# Altium schematic symbol library Integrated Circuits.SchLib: 166 symbols (part 1 of 2)
Pins are listed as number, name and electrical type; pins without a type are passive.

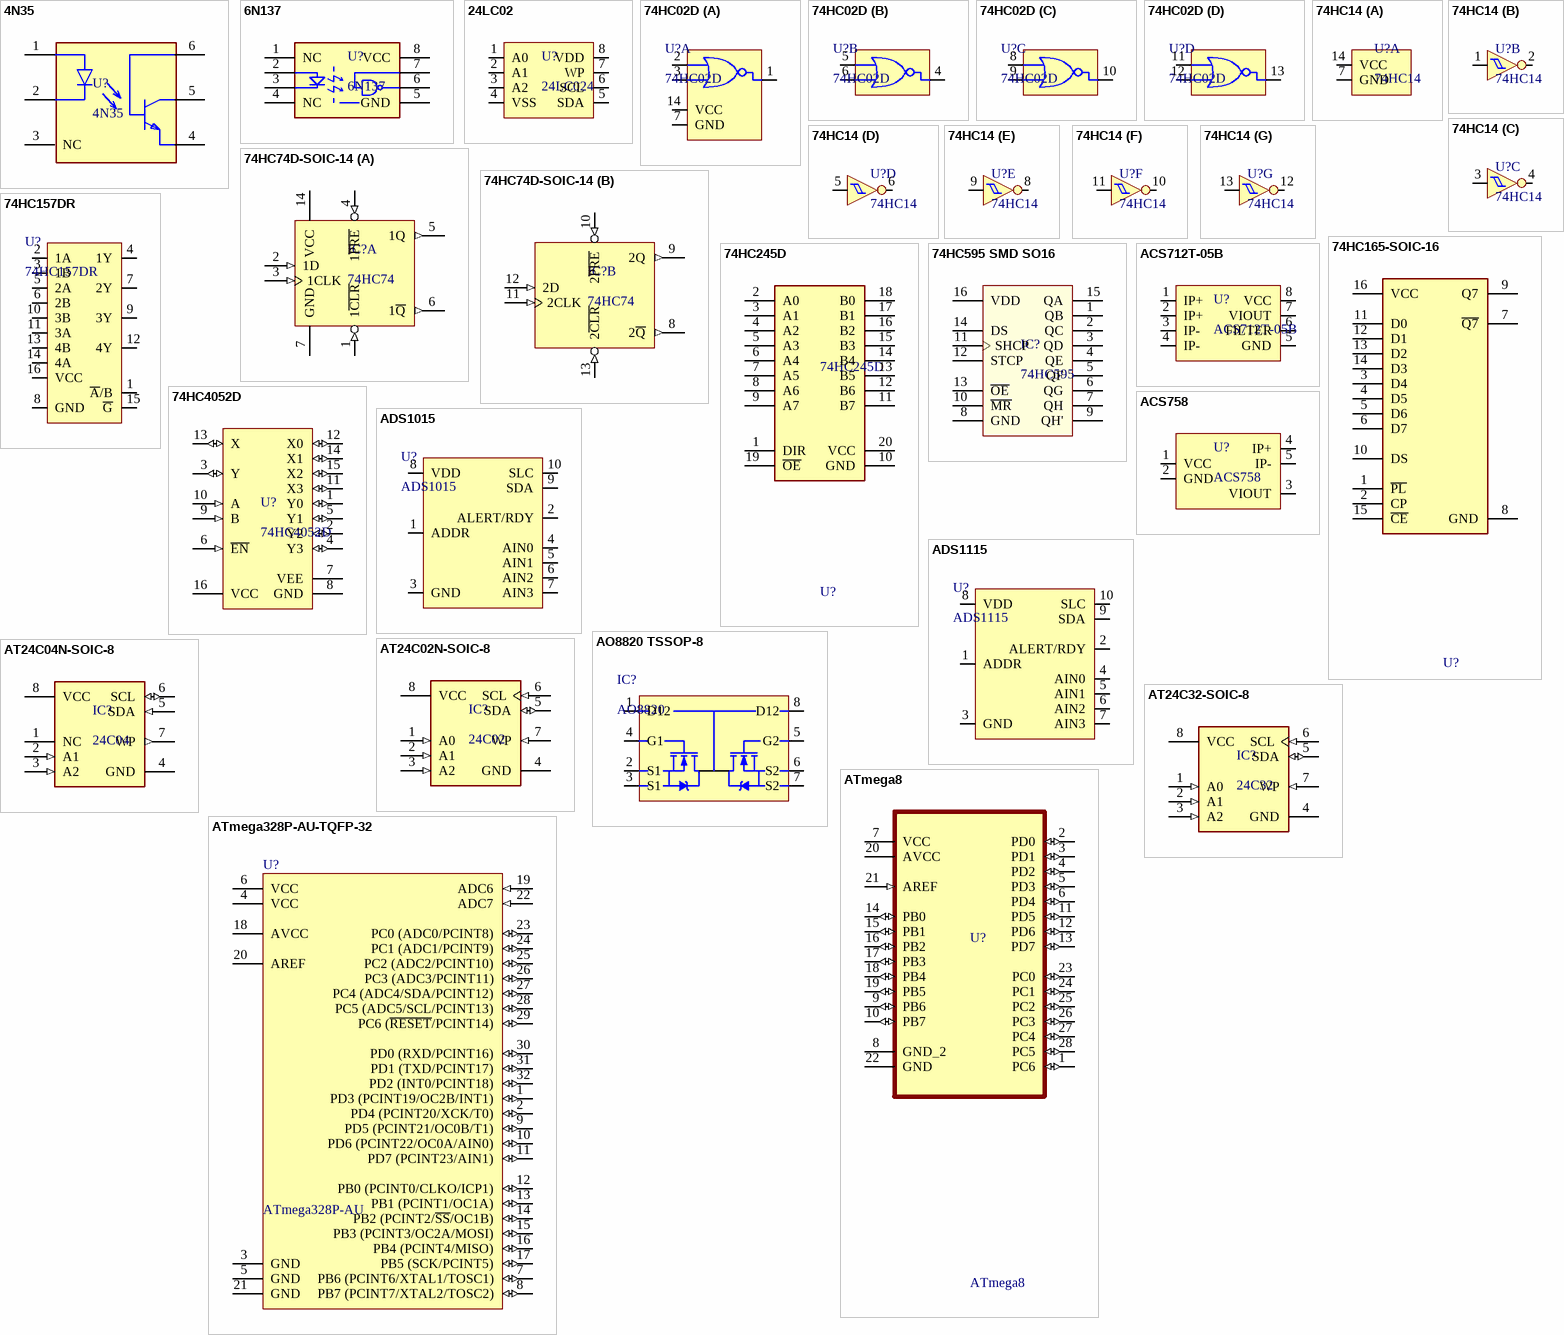
[diagram p0: symbols 4N35 to ATmega328P-AU-TQFP-32]

## 4N35
designator U?
Optocoupler DC-IN 1-CH Transistor With Base DC-OUT 6-Pin PDIP SMD White T/R; Code: 2302-016; Designed by: nhox; Value: 4N35
footprint SOP-6 7.12x6.5 2.54P (PDIP6 8.51x6.35, 2.54P)
pins: 1 A, 2 C, 3 NC, 4 E, 5 C, 6 B

## 6N137
designator U?
High Speed Optocoupler, Single; Designed by: nhox; Code: N/A; Value: 6N137
footprint SMD-8
pins: 1 NC, 2 A, 3 C, 4 NC, 5 GND (power), 6 VO (oc), 7 VE, 8 VCC (power)

## 24LC02
designator U?, comment 24LC024
Low-power CMOS technology, 256 bytes (256 x 8); Code: 5205-002; Designed by: nhox
footprint SO_8 (SOP-8, 5x3.9mm body 1.27mm pitch, SOT96-1, M08A, S8, SOIC8, VO8, MS-012AA(JEDEC), R-8, 8S2, VOG8)
pins: 1 A0, 2 A1, 3 A2, 4 VSS, 5 SDA, 6 SCL, 7 WP, 8 VDD

## 74HC02D
designator U?
Quad 2-input NOR gate; Designed by: Nhox; Code: N/A
footprint SO_14 (SOP, SOIC, 3.9mm width, 1.27mm pitch,)
part A pins: 1 Y, 2 A, 3 B, 7 GND, 14 VCC
part B pins: 4 Y, 5 A, 6 B
part C pins: 8 A, 9 B, 10 Y
part D pins: 11 A, 12 B, 13 Y

## 74HC14
designator U?
Hex inverting Schmitt trigger; Code: 5015-019
footprint SO_14 (SOP, SOIC, 3.9mm width, 1.27mm pitch,)
part A pins: 7 GND, 14 VCC
part B pins: 1, 2
part C pins: 3, 4
part D pins: 5, 6
part E pins: 8, 9
part F pins: 10, 11
part G pins: 12, 13

## 74HC74D-SOIC-14
designator IC?, comment 74HC74
Dual D-type flip-flop with set and reset; positive edge-trigger; Designed by: TranLuyen; Code: N/A
footprint SO_14 (SOP, SOIC, 3.9mm width, 1.27mm pitch,)
part A pins: 1 1~{CLR} (in), 2 1D (in), 3 1CLK (in), 4 1~{PRE} (in), 5 1Q (out), 6 1~{Q} (out), 7 GND (power), 14 VCC (power)
part B pins: 8 2~{Q} (out), 9 2Q (out), 10 2~{PRE} (in), 11 2CLK (in), 12 2D (in), 13 2~{CLR} (in)

## 74HC157DR
designator U?
QUADRUPLE 2-LINE TO 1-LINE DATA SELECTORS/MULTIPLEXERS; Designed by: Nhox; Code: N/A
footprint SO_16 (SOP, SOIC, 3.9mm width, 1.27mm pitch,)
pins: 1 ~{A}/B, 2 1A, 3 1B, 4 1Y, 5 2A, 6 2B, 7 2Y, 8 GND, 9 3Y, 10 3B, 11 3A, 12 4Y, 13 4B, 14 4A, 15 ~{G}, 16 VCC

## 74HC165-SOIC-16
designator U?, comment 74HC165  (value not drawn)
IC Shift Register 1 Element 8 Bit, Complementary 16-SOIC; Code: 5001-007; Designed by: nhox
footprint SO_16 (SOP, SOIC, 3.9mm width, 1.27mm pitch,)
pins: 1 ~{PL}, 2 CP, 3 D4, 4 D5, 5 D6, 6 D7, 7 ~{Q7}, 8 GND (power), 9 Q7, 10 DS, 11 D0, 12 D1, 13 D2, 14 D3, 15 ~{CE}, 16 VCC (power)

## 74HC245D
designator U?
Transceiver, Non-Inverting, CMOS, Voltage - Supply: 2V ~ 6V, Input Type: CMOS, Output Type: 3-State, Current - Output High, Low: 7.8mA, 7.8mA, 20-SOIC; Code: 5001-035; Designed by: nhox
footprint SO_20_W (SOP, SOIC, 7.5mm width, 1.27mm pitch,)
pins: 1 DIR, 2 A0, 3 A1, 4 A2, 5 A3, 6 A4, 7 A5, 8 A6, 9 A7, 10 GND, 11 B7, 12 B6, 13 B5, 14 B4, 15 B3, 16 B2, 17 B1, 18 B0, 19 ~{OE}, 20 VCC

## 74HC595 SMD SO16
designator IC?, comment 74HC595
Shift Register Single 8-Bit Serial to Serial/Parallel 16-Pin SOIC T/R; Code: 5001-017; Designed by: nhox
footprint SO_16 (SOP, SOIC, 3.9mm width, 1.27mm pitch,)
pins: 1 QB, 2 QC, 3 QD, 4 QE, 5 QF, 6 QG, 7 QH, 8 GND (power), 9 QH' "OUTPUT", 10 ~{MR}, 11 SHCP, 12 STCP, 13 ~{OE}, 14 DS, 15 QA, 16 VDD (power)

## 74HC4052D
designator U?
Analog Multiplexer / Demultiplexer, High-Performance Silicon-Gate CMOS, 2 to 12 V, -55 to 125 degC, 16-Pin PDIP, Pb-Free, Tube; Code: 5001-002; ComponentLink1Description: Manufacturer URL; ComponentLink2Description: Datasheet; ComponentLink3URL: http://www.onsemi.com/pub_link/Collateral/MC14028B-D.PDF; ComponentLink3Description: Package Specification; ComponentLink1URL: http://www.onsemi.com/; ComponentLink2URL: http://www.onsemi.com/pub_link/Collateral/MC74HC4051A-D.PDF
footprint SO_16 (SOP, SOIC, 3.9mm width, 1.27mm pitch,)
pins: 1 Y0 (io), 2 Y2 (io), 3 Y (io), 4 Y3 (io), 5 Y1 (io), 6 ~{EN} (in), 7 VEE (power), 8 GND (power), 9 B (in), 10 A (in), 11 X3 (io), 12 X0 (io), 13 X (io), 14 X1 (io), 15 X2 (io), 16 VCC (power)

## ACS712T-05B
designator U?
+-5A, 185mV/A; Code: N/A
footprint SO_8 (SOP-8, 5x3.9mm body 1.27mm pitch, SOT96-1, M08A, S8, SOIC8, VO8, MS-012AA(JEDEC), R-8, 8S2, VOG8)
pins: 1 IP+, 2 IP+, 3 IP-, 4 IP-, 5 GND, 6 FILTER, 7 VIOUT, 8 VCC

## ACS758
designator U?
Current Sensor 150A 1 Channel Hall Effect, Open Loop Bidirectional / 5-CB Formed Leads, PFF; Code: N/A
footprint DIP_PFF
pins: 1 VCC, 2 GND, 3 VIOUT, 4 IP+, 5 IP-

## ADS1015
designator U?
HIGH PERFORMANCE CURRENT MODE PWM CONTROLLER; Code: N/A
footprint VSSOP-10
pins: 1 ADDR, 2 ALERT/RDY, 3 GND, 4 AIN0, 5 AIN1, 6 AIN2, 7 AIN3, 8 VDD, 9 SDA, 10 SLC

## ADS1115
designator U?
HIGH PERFORMANCE CURRENT MODE PWM CONTROLLER; Code: N/A
footprint VSSOP-10
pins: 1 ADDR, 2 ALERT/RDY, 3 GND, 4 AIN0, 5 AIN1, 6 AIN2, 7 AIN3, 8 VDD, 9 SDA, 10 SLC

## AO8820 TSSOP-8
designator IC?, comment AO8820
20V Common-Drain Dual N-Channel MOSFET; Code: N/A
footprint SOG65_8 (PW TSSOP (TI), MO-153 (JEDEC), 8Lead, pitch: 0.65mm, 3x4.4x1.2mm)
pins: 1 D12, 2 S1, 3 S1, 4 G1, 5 G2, 6 S2, 7 S2, 8 D12

## AT24C02N-SOIC-8
designator IC?, comment 24C02
EEPROM 2Kb (256 x 8); Code: 5202-025
footprint SO_8 (SOP-8, 5x3.9mm body 1.27mm pitch, SOT96-1, M08A, S8, SOIC8, VO8, MS-012AA(JEDEC), R-8, 8S2, VOG8)
pins: 1 A0 (in), 2 A1 (in), 3 A2 (in), 4 GND (power), 5 SDA (io), 6 SCL (in), 7 WP (in), 8 VCC (power)

## AT24C04N-SOIC-8
designator IC?, comment 24C04
EEPROM 4Kb (512 x 8); Code: 5202-015
footprint SO_8 (SOP-8, 5x3.9mm body 1.27mm pitch, SOT96-1, M08A, S8, SOIC8, VO8, MS-012AA(JEDEC), R-8, 8S2, VOG8)
pins: 1 NC, 2 A1 (in), 3 A2 (in), 4 GND (power), 5 SDA (in), 6 SCL (io), 7 WP (out), 8 VCC

## AT24C32-SOIC-8
designator IC?, comment 24C32
EEPROM Serial-2Wire 32K-bit 4K x 8 1.8V/2.5V/3.3V/5V Automotive 8-Pin SOIC T/; Code: 5202-026
footprint SO_8 (SOP-8, 5x3.9mm body 1.27mm pitch, SOT96-1, M08A, S8, SOIC8, VO8, MS-012AA(JEDEC), R-8, 8S2, VOG8)
pins: 1 A0 (in), 2 A1 (in), 3 A2 (in), 4 GND (power), 5 SDA (io), 6 SCL (in), 7 WP (in), 8 VCC (power)

## ATmega8
designator U?
AVR Microcontroller IC 8-Bit 16MHz 8KB FLASH, 28-DIP; Code: N/A
footprint DIP_28 (DIP, pitch 2.54mm, 300mil Width)
pins: 1 PC6 (io), 2 PD0 (io), 3 PD1 (io), 4 PD2 (io), 5 PD3 (io), 6 PD4 (io), 7 VCC (power), 8 GND_2, 9 PB6 (io), 10 PB7 (io), 11 PD5 (io), 12 PD6 (io), 13 PD7 (io), 14 PB0 (io), 15 PB1 (io), 16 PB2 (io), 17 PB3 (io), 18 PB4 (io), 19 PB5 (io), 20 AVCC (power), 21 AREF (in), 22 GND, 23 PC0 (io), 24 PC1 (io), 25 PC2 (io), 26 PC3 (io), 27 PC4 (io), 28 PC5 (io)

## ATmega328P-AU-TQFP-32
designator U?, comment ATmega328P-AU
8-bit AVR Microcontroller, 32KB Flash, 1KB EEPROM, 2KB SRAM, 32-pin TQFP, Industrial Grade (-40°C to 85°C); Code: 7202-032; ComponentLink1URL: http://www.atmel.com/; ComponentLink2Description: ATmega48A/48PA/88A/88PA/168A/168PA/328/328P Datasheet; ComponentLink1Description: Manufacturer URL; ComponentLink3Description: ATmega48A/48PA/88A/88PA/168A/168PA/328/328P Summary; ComponentLink2URL: http://www.atmel.com/dyn/resources/prod_documents/doc8271.pdf; ComponentLink3URL: http://www.atmel.com/dyn/resources/prod_documents/8271S.pdf
footprint TQFP-32A_M (Thin QFP, 32-Leads, Body 7x7mm, Pitch 0.8mm, IPC Low Density)
pins: 1 PD3 (PCINT19/OC2B/INT1) (io), 2 PD4 (PCINT20/XCK/T0) (io), 3 GND (power), 4 VCC (power), 5 GND (power), 6 VCC (power), 7 PB6 (PCINT6/XTAL1/TOSC1) (io), 8 PB7 (PCINT7/XTAL2/TOSC2) (io), 9 PD5 (PCINT21/OC0B/T1) (io), 10 PD6 (PCINT22/OC0A/AIN0) (io), 11 PD7 (PCINT23/AIN1) (io), 12 PB0 (PCINT0/CLKO/ICP1) (io), 13 PB1 (PCINT1/OC1A) (io), 14 PB2 (PCINT2/~{SS}/OC1B) (io), 15 PB3 (PCINT3/OC2A/MOSI) (io), 16 PB4 (PCINT4/MISO) (io), 17 PB5 (SCK/PCINT5) (io), 18 AVCC (power), 19 ADC6 (in), 20 AREF, 21 GND (power), 22 ADC7 (in), 23 PC0 (ADC0/PCINT8) (io), 24 PC1 (ADC1/PCINT9) (io), 25 PC2 (ADC2/PCINT10) (io), 26 PC3 (ADC3/PCINT11) (io), 27 PC4 (ADC4/SDA/PCINT12) (io), 28 PC5 (ADC5/SCL/PCINT13) (io), 29 PC6 (~{RESET}/PCINT14) (io), 30 PD0 (RXD/PCINT16) (io), 31 PD1 (TXD/PCINT17) (io), 32 PD2 (INT0/PCINT18) (io)

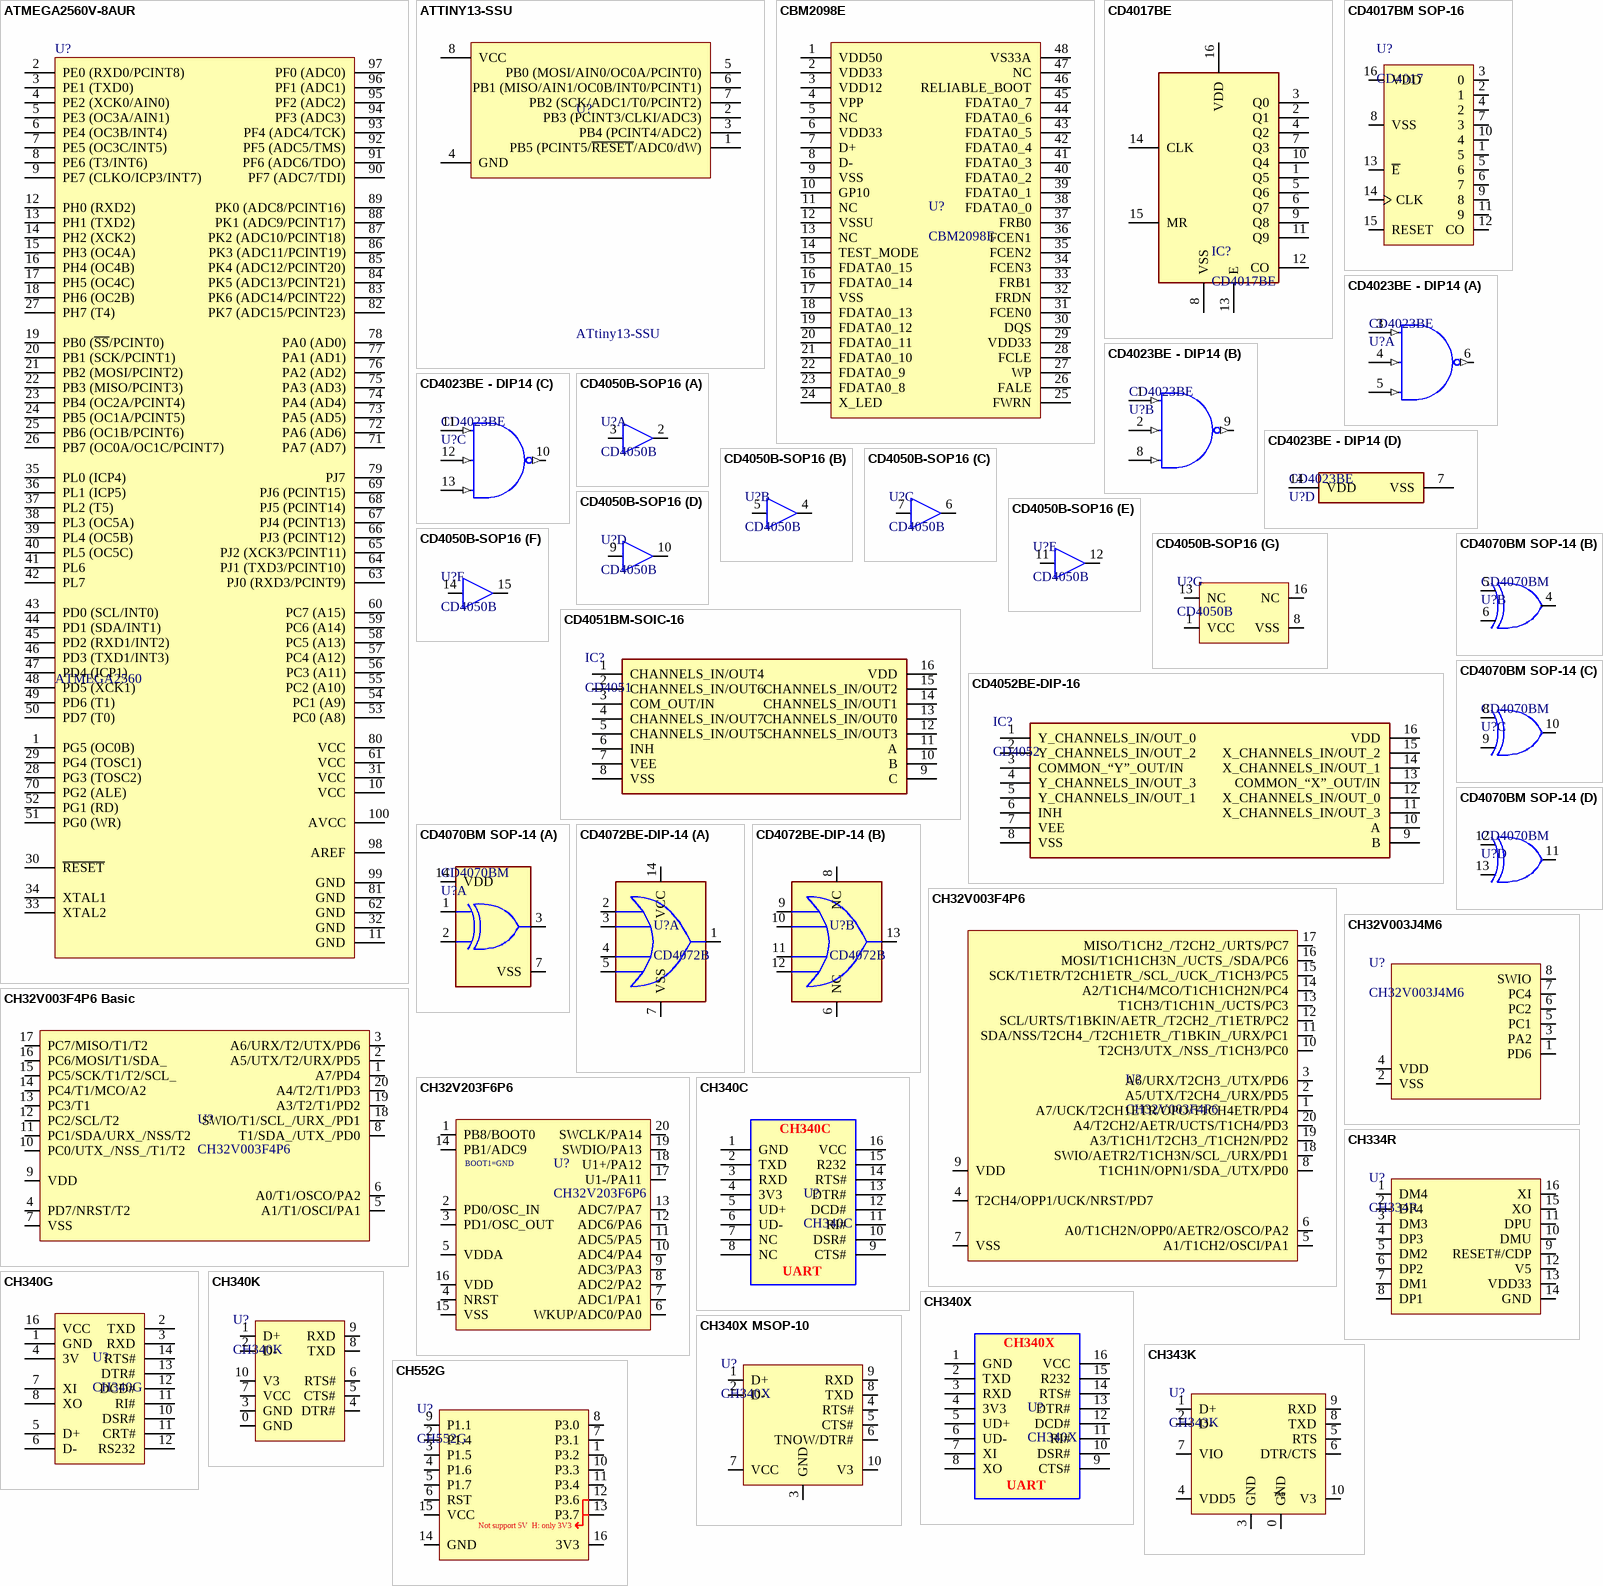
[diagram p1: symbols ATMEGA2560V-8AUR to CH552G]

## ATMEGA2560V-8AUR
designator U?, comment ATMEGA2560
8-bit AVR Microcontroller, 100-pin TQFP; Code: 7202-010
footprint QFG50_100 (LQFP100, PQFP100, A100 (Cypress), TQ100/VQ100 (Xilinx), 14.0x14.0mm, Pitch 0.5mm, HT100, HTG100)
pins: 1 PG5 (OC0B), 2 PE0 (RXD0/PCINT8), 3 PE1 (TXD0), 4 PE2 (XCK0/AIN0), 5 PE3 (OC3A/AIN1), 6 PE4 (OC3B/INT4), 7 PE5 (OC3C/INT5), 8 PE6 (T3/INT6), 9 PE7 (CLKO/ICP3/INT7), 10 VCC, 11 GND, 12 PH0 (RXD2), 13 PH1 (TXD2), 14 PH2 (XCK2), 15 PH3 (OC4A), 16 PH4 (OC4B), 17 PH5 (OC4C), 18 PH6 (OC2B), 19 PB0 (~{SS}/PCINT0), 20 PB1 (SCK/PCINT1), 21 PB2 (MOSI/PCINT2), 22 PB3 (MISO/PCINT3), 23 PB4 (OC2A/PCINT4), 24 PB5 (OC1A/PCINT5), 25 PB6 (OC1B/PCINT6), 26 PB7 (OC0A/OC1C/PCINT7), 27 PH7 (T4), 28 PG3 (TOSC2), 29 PG4 (TOSC1), 30 ~{RESET}, 31 VCC, 32 GND, 33 XTAL2, 34 XTAL1, 35 PL0 (ICP4), 36 PL1 (ICP5), 37 PL2 (T5), 38 PL3 (OC5A), 39 PL4 (OC5B), 40 PL5 (OC5C), 41 PL6, 42 PL7, 43 PD0 (SCL/INT0), 44 PD1 (SDA/INT1), 45 PD2 (RXD1/INT2), 46 PD3 (TXD1/INT3), 47 PD4 (ICP1), 48 PD5 (XCK1), 49 PD6 (T1), 50 PD7 (T0), 51 PG0 (WR), 52 PG1 (RD), 53 PC0 (A8), 54 PC1 (A9), 55 PC2 (A10), 56 PC3 (A11), 57 PC4 (A12), 58 PC5 (A13), 59 PC6 (A14), 60 PC7 (A15), 61 VCC, 62 GND, 63 PJ0 (RXD3/PCINT9), 64 PJ1 (TXD3/PCINT10), 65 PJ2 (XCK3/PCINT11), 66 PJ3 (PCINT12), 67 PJ4 (PCINT13), 68 PJ5 (PCINT14), 69 PJ6 (PCINT15), 70 PG2 (ALE), 71 PA7 (AD7), 72 PA6 (AD6), 73 PA5 (AD5), 74 PA4 (AD4), 75 PA3 (AD3), 76 PA2 (AD2), 77 PA1 (AD1), 78 PA0 (AD0), 79 PJ7, 80 VCC, 81 GND, 82 PK7 (ADC15/PCINT23), 83 PK6 (ADC14/PCINT22), 84 PK5 (ADC13/PCINT21), 85 PK4 (ADC12/PCINT20), 86 PK3 (ADC11/PCINT19), 87 PK2 (ADC10/PCINT18), 88 PK1 (ADC9/PCINT17), 89 PK0 (ADC8/PCINT16), 90 PF7 (ADC7/TDI), 91 PF6 (ADC6/TDO), 92 PF5 (ADC5/TMS), 93 PF4 (ADC4/TCK), 94 PF3 (ADC3), 95 PF2 (ADC2), 96 PF1 (ADC1), 97 PF0 (ADC0), 98 AREF, 99 GND, 100 AVCC

## ATTINY13-SSU
designator U?, comment ATtiny13-SSU
8-bit AVR Microcontroller, 2.7-5.5V, 1KB Flash, 64 Bytes EEPROM, 64 Bytes SRAM, 8-pin SOIC, Industrial Grade (-40°C to 85°C), Pb-Free; Code: 7202-065; Designed by: nhox
footprint SO_8 (SOP-8, 5x3.9mm body 1.27mm pitch, SOT96-1, M08A, S8, SOIC8, VO8, MS-012AA(JEDEC), R-8, 8S2, VOG8)
pins: 1 PB5 (PCINT5/~{RESET}/ADC0/dW), 2 PB3 (PCINT3/CLKI/ADC3), 3 PB4 (PCINT4/ADC2), 4 GND (power), 5 PB0 (MOSI/AIN0/OC0A/PCINT0), 6 PB1 (MISO/AIN1/OC0B/INT0/PCINT1), 7 PB2 (SCK/ADC1/T0/PCINT2), 8 VCC (power)

## CBM2098E
designator U?
USB 2.0 Flash Disk Controller, TQFP48, USB 2.0 - 1.1; Designed by: nhox; Code: N/A
footprint QFG50_48 (LQFP48, PQFF, PQFG, TSQFP, 48-Leads, Body 7.00x7.00mm, Pitch 0.50mm)
pins: 1 VDD50, 2 VDD33, 3 VDD12, 4 VPP, 5 NC, 6 VDD33, 7 D+, 8 D-, 9 VSS, 10 GP10, 11 NC, 12 VSSU, 13 NC, 14 TEST_MODE, 15 FDATA0_15, 16 FDATA0_14, 17 VSS, 18 FDATA0_13, 19 FDATA0_12, 20 FDATA0_11, 21 FDATA0_10, 22 FDATA0_9, 23 FDATA0_8, 24 X_LED, 25 FWRN, 26 FALE, 27 WP, 28 FCLE, 29 VDD33, 30 DQS, 31 FCEN0, 32 FRDN, 33 FRB1, 34 FCEN3, 35 FCEN2, 36 FCEN1, 37 FRB0, 38 FDATA0_0, 39 FDATA0_1, 40 FDATA0_2, 41 FDATA0_3, 42 FDATA0_4, 43 FDATA0_5, 44 FDATA0_6, 45 FDATA0_7, 46 RELIABLE_BOOT, 47 NC, 48 VS33A

## CD4017BE
designator IC?
IC 10-OUT DECADE COUNTER 16-DIP; Code: 5004-058
footprint DIP_16 (DIP, pitch 2.54mm, 300mil Width)
pins: 1 Q5, 2 Q1, 3 Q0, 4 Q2, 5 Q6, 6 Q7, 7 Q3, 8 VSS, 9 Q8, 10 Q4, 11 Q9, 12 CO, 13 E, 14 CLK, 15 MR, 16 VDD

## CD4017BM SOP-16
designator U?, comment CD4017
CMOS Decade Counter with 10 Decoded Outputs; Code: 5004-039; Designed by: TranLuyen
footprint SO_16 (SOP, SOIC, 3.9mm width, 1.27mm pitch,)
pins: 1 5, 2 1, 3 0, 4 2, 5 6, 6 7, 7 3, 8 VSS, 9 8, 10 4, 11 9, 12 CO, 13 ~{E}, 14 CLK, 15 RESET, 16 VDD

## CD4023BE - DIP14
designator U?, comment CD4023BE
IC GATE NAND 3CH 3-INP 14DIP; Designed by: TranLuyen; Code: N/A
footprint DIP_14 (DIP, pitch 2.54mm, 300mil Width)
part A pins: 3 D (in), 4 E (in), 5 F (in), 6 K (out)
part B pins: 1 A (in), 2 B (in), 8 C (in), 9 J (out)
part C pins: 10 L (out), 11 I (in), 12 H (in), 13 G (in)
part D pins: 7 VSS (power), 14 VDD (power)

## CD4050B-SOP16
designator U?, comment CD4050B
CMOS Hex Non-Inverting Buffer/Converter; Code: 5004-054
footprint SO_16 (SOP, SOIC, 3.9mm width, 1.27mm pitch,)
part A pins: 2 G, 3 A
part B pins: 4 H, 5 B
part C pins: 6 I, 7 C
part D pins: 9 D, 10 J
part E pins: 11 E, 12 K
part F pins: 14 F, 15 L
part G pins: 1 VCC (power), 8 VSS (power), 13 NC, 16 NC

## CD4051BM-SOIC-16
designator IC?, comment CD4051
CD405xB CMOS Single 8-Channel Analog Multiplexer/Demultiplexer with Logic-Level Conversion; Code: 5004-045
footprint SO_16 (SOP, SOIC, 3.9mm width, 1.27mm pitch,)
pins: 1 CHANNELS_IN/OUT4, 2 CHANNELS_IN/OUT6, 3 COM_OUT/IN, 4 CHANNELS_IN/OUT7, 5 CHANNELS_IN/OUT5, 6 INH, 7 VEE, 8 VSS, 9 C, 10 B, 11 A, 12 CHANNELS_IN/OUT3, 13 CHANNELS_IN/OUT0, 14 CHANNELS_IN/OUT1, 15 CHANNELS_IN/OUT2, 16 VDD

## CD4052BE-DIP-16
designator IC?, comment CD4052
CD405xB CMOS Single 8-Channel Analog Multiplexer/Demultiplexer with Logic-Level Conversion; Code: 5004-047
footprint DIP_16 (DIP, pitch 2.54mm, 300mil Width)
pins: 1 Y_CHANNELS_IN/OUT_0, 2 Y_CHANNELS_IN/OUT_2, 3 COMMON_“Y”_OUT/IN, 4 Y_CHANNELS_IN/OUT_3, 5 Y_CHANNELS_IN/OUT_1, 6 INH, 7 VEE, 8 VSS, 9 B, 10 A, 11 X_CHANNELS_IN/OUT_3, 12 X_CHANNELS_IN/OUT_0, 13 COMMON_“X”_OUT/IN, 14 X_CHANNELS_IN/OUT_1, 15 X_CHANNELS_IN/OUT_2, 16 VDD

## CD4070BM SOP-14
designator U?, comment CD4070BM
IC GATE XOR 4CH 2-INP 14SOIC; Code: 5004-001; Designed by: TranLuyen
footprint SO_14 (SOP, SOIC, 3.9mm width, 1.27mm pitch,)
part A pins: 1 A, 2 B, 3 J, 7 VSS, 14 VDD
part B pins: 4 K, 5 C, 6 D
part C pins: 8 E, 9 F, 10 L
part D pins: 11 M, 12 G, 13 H

## CD4072BE-DIP-14
designator U?, comment CD4072B
Dual 3−Input 3−Output OR / Gate; Code: 5004-060; Designed by: TranLuyen; Code_Sub1: 5401-003; ComponentLink1Description: datasheet; ComponentLink1URL: https://www.ti.com/lit/ds/symlink/cd4071b.pdf
footprint DIP_14 (DIP, pitch 2.54mm, 300mil Width)
part A pins: 1 J, 2 A, 3 B, 4 C, 5 D, 7 VSS (power), 14 VCC (power)
part B pins: 6 NC (power), 8 NC (power), 9 E, 10 F, 11 G, 12 H, 13 K

## CH32V003F4P6
designator U?
ROM 16KB, SRAM 2KB, 1920B BootLoader; Designed by: Nhox; Code: N/A
footprint SOG65_20 (PW TSSOP (TI), MO-153-AC (JEDEC), 20Lead, pitch: 0.65mm, 6.5x4.4x1.2mm)
pins: 1 A7/UCK/T2CH1ETR/OPO/T1CH4ETR/PD4, 2 A5/UTX/T2CH4_/URX/PD5, 3 A6/URX/T2CH3_/UTX/PD6, 4 T2CH4/OPP1/UCK/NRST/PD7, 5 A1/T1CH2/OSCI/PA1, 6 A0/T1CH2N/OPP0/AETR2/OSCO/PA2, 7 VSS, 8 T1CH1N/OPN1/SDA_/UTX/PD0, 9 VDD, 10 T2CH3/UTX_/NSS_/T1CH3/PC0, 11 SDA/NSS/T2CH4_/T2CH1ETR_/T1BKIN_/URX/PC1, 12 SCL/URTS/T1BKIN/AETR_/T2CH2_/T1ETR/PC2, 13 T1CH3/T1CH1N_/UCTS/PC3, 14 A2/T1CH4/MCO/T1CH1CH2N/PC4, 15 SCK/T1ETR/T2CH1ETR_/SCL_/UCK_/T1CH3/PC5, 16 MOSI/T1CH1CH3N_/UCTS_/SDA/PC6, 17 MISO/T1CH2_/T2CH2_/URTS/PC7, 18 SWIO/AETR2/T1CH3N/SCL_/URX/PD1, 19 A3/T1CH1/T2CH3_/T1CH2N/PD2, 20 A4/T2CH2/AETR/UCTS/T1CH4/PD3

## CH32V003F4P6 Basic
designator U?, comment CH32V003F4P6
ROM 16KB, SRAM 2KB, 1920B BootLoader; Designed by: Nhox; Code: N/A
footprint SOG65_20 (PW TSSOP (TI), MO-153-AC (JEDEC), 20Lead, pitch: 0.65mm, 6.5x4.4x1.2mm)
pins: 1 A7/PD4, 2 A5/UTX/T2/URX/PD5, 3 A6/URX/T2/UTX/PD6, 4 PD7/NRST/T2, 5 A1/T1/OSCI/PA1, 6 A0/T1/OSCO/PA2, 7 VSS, 8 T1/SDA_/UTX_/PD0, 9 VDD, 10 PC0/UTX_/NSS_/T1/T2, 11 PC1/SDA/URX_/NSS/T2, 12 PC2/SCL/T2, 13 PC3/T1, 14 PC4/T1/MCO/A2, 15 PC5/SCK/T1/T2/SCL_, 16 PC6/MOSI/T1/SDA_, 17 PC7/MISO/T1/T2, 18 SWIO/T1/SCL_/URX_/PD1, 19 A3/T2/T1/PD2, 20 A4/T2/T1/PD3

## CH32V003J4M6
designator U?
ROM 16KB, SRAM 2KB, 1920B BootLoader; Designed by: Nhox; Code: N/A
footprint SO_8 (SOP-8, 5x3.9mm body 1.27mm pitch, SOT96-1, M08A, S8, SOIC8, VO8, MS-012AA(JEDEC), R-8, 8S2, VOG8)
pins: 1 PD6, 2 VSS, 3 PA2, 4 VDD, 5 PC1, 6 PC2, 7 PC4, 8 SWIO

## CH32V203F6P6
designator U?
ROM 16KB, SRAM 2KB, 1920B BootLoader; Designed by: Nhox; Code: N/A
footprint SOG65_20 (PW TSSOP (TI), MO-153-AC (JEDEC), 20Lead, pitch: 0.65mm, 6.5x4.4x1.2mm)
pins: 1 PB8/BOOT0, 2 PD0/OSC_IN, 3 PD1/OSC_OUT, 4 NRST, 5 VDDA, 6 WKUP/ADC0/PA0, 7 ADC1/PA1, 8 ADC2/PA2, 9 ADC3/PA3, 10 ADC4/PA4, 11 ADC5/PA5, 12 ADC6/PA6, 13 ADC7/PA7, 14 PB1/ADC9, 15 VSS, 16 VDD, 17 U1-/PA11, 18 U1+/PA12, 19 SWDIO/PA13, 20 SWCLK/PA14
text: BOOT1=GND

## CH334R
designator U?
SOP-16, Driver IC, USB UART, RS232, RS485, RS422; Designed by: TranLuyen; Code: N/A
footprint SOG63_16 (SOP DBQ, QSOP, 16-Leads, Body 4.90x3.90mm, Pitch 0.635mm)
pins: 1 DM4, 2 DP4, 3 DM3, 4 DP3, 5 DM2, 6 DP2, 7 DM1, 8 DP1, 9 RESET#/CDP, 10 DMU, 11 DPU, 12 V5, 13 VDD33, 14 GND, 15 XO, 16 XI

## CH340C
designator U?
SOP-16, Driver IC, USB UART, RS232, RS485, RS422; Designed by: nhox; Code: 5010-015-1
footprint SO_16 (SOP, SOIC, 3.9mm width, 1.27mm pitch,)
pins: 1 GND, 2 TXD, 3 RXD, 4 3V3, 5 UD+, 6 UD-, 7 NC, 8 NC, 9 CTS#, 10 DSR#, 11 RI#, 12 DCD#, 13 DTR#, 14 RTS#, 15 R232, 16 VCC
text: UART

## CH340G
designator U?
SOP-16, Driver IC, USB UART, RS232, RS485, RS422; Designed by: nhox; Code: 5010-015-1
footprint SO_16 (SOP, SOIC, 3.9mm width, 1.27mm pitch,)
pins: 1 GND, 2 TXD, 3 RXD, 4 3V, 5 D+, 6 D-, 7 XI, 8 XO, 10 DSR#, 11 RI#, 11 CRT#, 12 DCD#, 12 RS232, 13 DTR#, 14 RTS#, 16 VCC

## CH340K
designator U?
USB To Serial; Designed by: Nhox; Code: N/A
footprint SSOP10 / ESSOP-10 (SSOP-10, ESSOP-10, 5x3.9mm body 1mm pitch)
pins: 0 GND, 1 D+, 2 D-, 3 GND, 4 DTR#, 5 CTS#, 6 RTS#, 7 VCC, 8 TXD, 9 RXD, 10 V3

## CH340X
designator U?
SOP-16, Driver IC, USB UART, RS232, RS485, RS422; Designed by: nhox; Code: N/A
footprint SO_16 (SOP, SOIC, 3.9mm width, 1.27mm pitch,)
pins: 1 GND, 2 TXD, 3 RXD, 4 3V3, 5 UD+, 6 UD-, 7 XI, 8 XO, 9 CTS#, 10 DSR#, 11 RI#, 12 DCD#, 13 DTR#, 14 RTS#, 15 R232, 16 VCC
text: UART

## CH340X MSOP-10
designator U?, comment CH340X
USB to Serial Port Chip CH340; Designed by: TranLuyen; Code: N/A
footprint VSSOP-10
pins: 1 D+, 2 D-, 3 GND, 4 RTS#, 5 CTS#, 6 TNOW/DTR#, 7 VCC, 8 TXD, 9 RXD, 10 V3

## CH343K
designator U?
USB To Serial; Code: N/A
footprint SSOP10 / ESSOP-10 (SSOP-10, ESSOP-10, 5x3.9mm body 1mm pitch)
pins: 0 GND, 1 D+, 2 D-, 3 GND, 4 VDD5, 5 RTS, 6 DTR/CTS, 7 VIO, 8 TXD, 9 RXD, 10 V3
text: TAB

## CH552G
designator U?
1T E8051 Core, ROM 16KB, iRAM 256B, xRAM 1KB, 128B Data Flash, USB Full/Low Speed, 3 Timer, 2 UART, SPI, 4 Chanel ADC, 6 Tuoch Key; Designed by: Nhox; Code: N/A
footprint SO_16 (SOP, SOIC, 3.9mm width, 1.27mm pitch,)
pins: 1 P3.2, 2 P1.4, 3 P1.5, 4 P1.6, 5 P1.7, 6 RST, 7 P3.1, 8 P3.0, 9 P1.1, 10 P3.3, 11 P3.4, 12 P3.6, 13 P3.7, 14 GND, 15 VCC, 16 3V3
text: Not support 5V  H: only 3V3

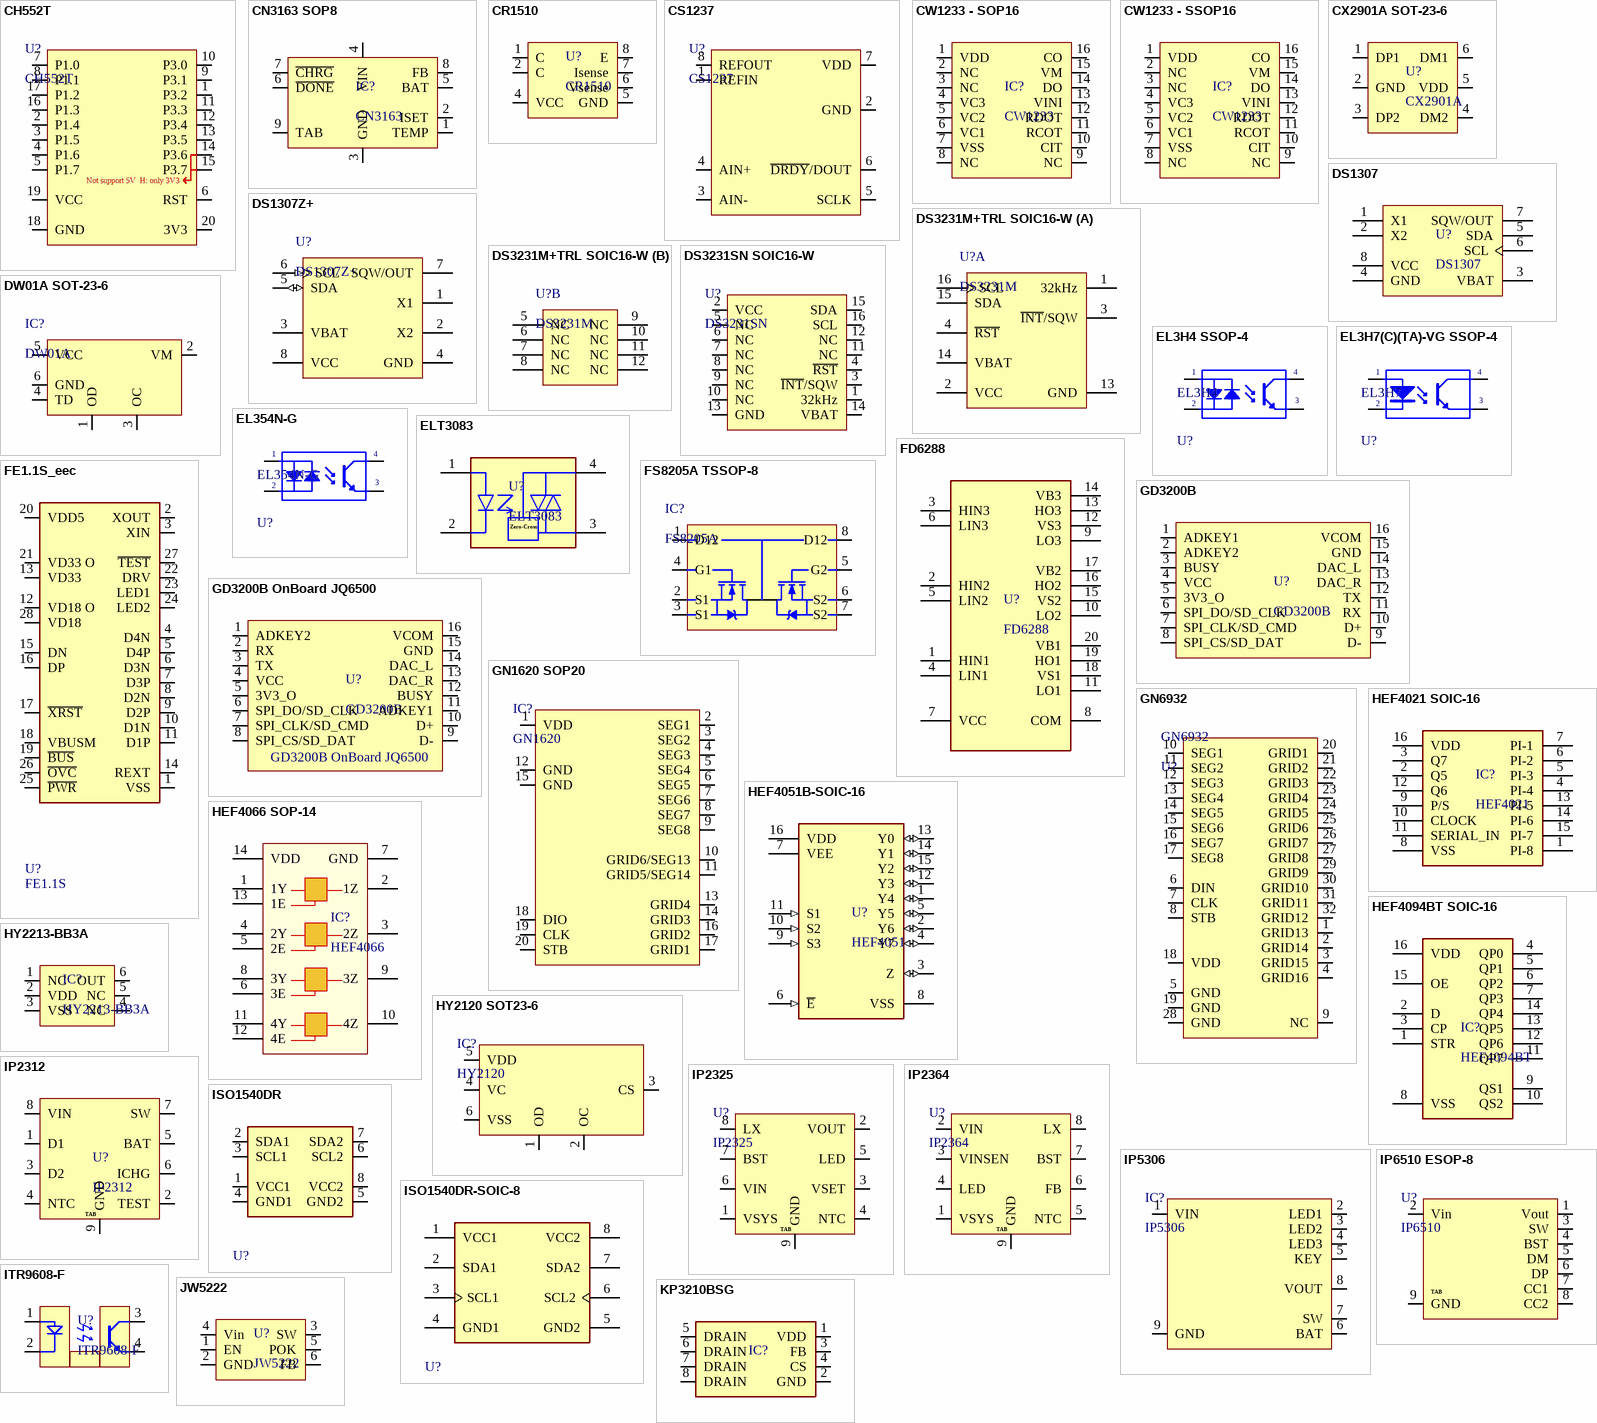
[diagram p2: symbols CH552T to KP3210BSG]

## CH552T
designator U?
1T E8051 Core, ROM 16KB, iRAM 256B, xRAM 1KB, 128B Data Flash, USB Full/Low Speed, 3 Timer, 2 UART, SPI, 4 Chanel ADC, 6 Tuoch Key; Designed by: Nhox; Code: N/A
footprint SOG65_20 (PW TSSOP (TI), MO-153-AC (JEDEC), 20Lead, pitch: 0.65mm, 6.5x4.4x1.2mm)
pins: 1 P3.2, 2 P1.4, 3 P1.5, 4 P1.6, 5 P1.7, 6 RST, 7 P1.0, 8 P1.1, 9 P3.1, 10 P3.0, 11 P3.3, 12 P3.4, 13 P3.5, 14 P3.6, 15 P3.7, 16 P1.3, 17 P1.2, 18 GND, 19 VCC, 20 3V3
text: Not support 5V  H: only 3V3

## CN3163 SOP8
designator IC?, comment CN3163
Lithium Ion Battery Charger for Solar-Powered Systems; Code: 5104-024; Designed by: TranLuyen
footprint SO_8T (SOP-8, 5x3.9mm body 1.27mm pitch, DDA, SO PowerPAD)
pins: 1 TEMP, 2 ISET, 3 GND, 4 VIN, 5 BAT, 6 ~{DONE}, 7 ~{CHRG}, 8 FB, 9 TAB

## CR1510
designator U?
IC POWER CONTROLLER FLYBACK 5W; Code: N/A
footprint SO_8 (SOP-8, 5x3.9mm body 1.27mm pitch, SOT96-1, M08A, S8, SOIC8, VO8, MS-012AA(JEDEC), R-8, 8S2, VOG8)
pins: 1 C, 2 C, 4 VCC, 5 GND, 6 Vsense, 7 Isense, 8 E

## CS1237
designator U?
CS1237 ADC 24 Bit; Designed by: TranLuyen; Code: N/A
footprint SO_8 (SOP-8, 5x3.9mm body 1.27mm pitch, SOT96-1, M08A, S8, SOIC8, VO8, MS-012AA(JEDEC), R-8, 8S2, VOG8)
pins: 1 REFIN, 2 GND, 3 AIN-, 4 AIN+, 5 SCLK, 6 ~{DRDY}/DOUT, 7 VDD, 8 REFOUT

## CW1233 - SOP16
designator IC?, comment CW1233
3 cell lion, polymer, SOP16; Code: 7203-042
footprint SO_16 (SOP, SOIC, 3.9mm width, 1.27mm pitch,)
pins: 1 VDD, 2 NC, 3 NC, 4 VC3, 5 VC2, 6 VC1, 7 VSS, 8 NC, 9 NC, 10 CIT, 11 RCOT, 12 RDOT, 13 VINI, 14 DO, 15 VM, 16 CO

## CW1233 - SSOP16
designator IC?, comment CW1233
3 cell lion, polymer, SSOP16; Code: N/A
footprint SOG63_16 (SOP DBQ, QSOP, 16-Leads, Body 4.90x3.90mm, Pitch 0.635mm)
pins: 1 VDD, 2 NC, 3 NC, 4 VC3, 5 VC2, 6 VC1, 7 VSS, 8 NC, 9 NC, 10 CIT, 11 RCOT, 12 RDOT, 13 VINI, 14 DO, 15 VM, 16 CO

## CX2901A SOT-23-6
designator U?, comment CX2901A
CX2901A USB charging protocol port controller IC; Code: 5015-075
footprint SOT-23-6
pins: 1 DP1, 2 GND, 3 DP2, 4 DM2, 5 VDD, 6 DM1

## DS1307
designator U?
64 x 8, Serial, I2C Real-Time Clock, 5.0V, 8-Pin SO, 0 to 70 degC, Pb-Free; Code: 5009-005
footprint SO_8 (SOP-8, 5x3.9mm body 1.27mm pitch, SOT96-1, M08A, S8, SOIC8, VO8, MS-012AA(JEDEC), R-8, 8S2, VOG8)
pins: 1 X1, 2 X2, 3 VBAT (power), 4 GND (power), 5 SDA, 6 SCL, 7 SQW/OUT (oc), 8 VCC (power)

## DS1307Z+
designator U?
64 x 8, Serial, I2C Real-Time Clock, 5.0V, 8-Pin SO, 0 to 70 degC, Pb-Free; Code: 5009-005; Designed by: TranLuyen; ComponentLink3Description: Package Specification; ComponentLink2Description: Datasheet; ComponentLink2URL: https://datasheet.octopart.com/DS1307ZN%2BT%26R-Maxim-Integrated-datasheet-48879621.pdf; ComponentLink3URL: http://pdfserv.maxim-ic.com/package_dwgs/21-0041.PDF; ComponentLink1URL: http://www.maxim-ic.com; ComponentLink1Description: Manufacturer URL
footprint SO_8 (SOP-8, 5x3.9mm body 1.27mm pitch, SOT96-1, M08A, S8, SOIC8, VO8, MS-012AA(JEDEC), R-8, 8S2, VOG8)
pins: 1 X1, 2 X2, 3 VBAT (power), 4 GND (power), 5 SDA (io), 6 SCL (in), 7 SQW/OUT (oc), 8 VCC (power)

## DS3231M+TRL SOIC16-W
designator U?, comment DS3231M
Real-Time Clock, I2C Interface, 16-Pin SO; Code: 5009-002
footprint SO_16_W (SOP, SOIC, 7.5mm width, 1.27mm pitch,)
part A pins: 1 32kHz, 2 VCC, 3 ~{INT}/SQW, 4 ~{RST}, 13 GND, 14 VBAT, 15 SDA, 16 SCL
part B pins: 5 NC, 6 NC, 7 NC, 8 NC, 9 NC, 10 NC, 11 NC, 12 NC

## DS3231SN SOIC16-W
designator U?, comment DS3231SN
Real-Time Clock, I2C Interface, 16-Pin SO; Code: 5009-002
footprint SO_16_W (SOP, SOIC, 7.5mm width, 1.27mm pitch,)
pins: 1 32kHz, 2 VCC (power), 3 ~{INT}/SQW, 4 ~{RST}, 5 NC, 6 NC, 7 NC, 8 NC, 9 NC, 10 NC, 11 NC, 12 NC, 13 GND (power), 14 VBAT (power), 15 SDA, 16 SCL

## DW01A SOT-23-6
designator IC?, comment DW01A
Protection IC for One-Cell Lithium-Ion/Lithium-Polymer Battery Pack; Code: 5104-025
footprint SOT-23-6
pins: 1 OD, 2 VM, 3 OC, 4 TD, 5 VCC, 6 GND

## EL3H4 SSOP-4
designator U?, comment EL3H4
4 PIN SSOP PHOTOTRANSISTOR PHOTOCOUPLER AC INPUT PHOTOCOUPLER; Designed by: TranLuyen; Code: N/A
footprint SO_4-EL3H7-G_MFG
pins: 1 A "Anode", 2 K "Cathode", 3 E "Emitter", 4 C "Collector"

## EL3H7(C)(TA)-VG SSOP-4
designator U?, comment EL3H7
Optocoupler DC-IN 1-CH Transistor DC-OUT 4-Pin SSOP T/R; Code: 2303-012; Designed by: TranLuyen; ComponentLink1Description: Datasheet; ComponentLink1URL: https://datasheet.octopart.com/EL3H7%28C%29%28TA%29-VG-Everlight-datasheet-101745741.pdf
footprint SO_4-EL3H7-G_MFG
pins: 1 A "Anode", 2 K "Cathode", 3 E "Emitter", 4 C "Collector"

## EL354N-G
designator U?
80V 3.75kV 100mV@1mA,20mA 1 1.2V AC,DC SOP-4-2.54mm Optocouplers - Phototransistor Output ROHS; Code: N/A
footprint SOP_4 (SOP-4, 4.4X4.1mm  body 2.54mm pitch)
pins: 1 A "Anode", 2 K "Cathode", 3 E "Emitter", 4 C "Collector"

## ELT3083
designator U?
4 PIN DIP ZERO-CROSS TRIAC DRIVER PHOTOCOUPLER / ELT304X, ELT306X, ELT308X Series; Designed by: TranLuyen; Code: N/A
footprint OPTO SMD
pins: 1 A, 2 C, 3 TERMINAL2, 4 TERMINAL1
text: Zero-Cross

## FD6288
designator U?
3-phase-brigde-driver; Code: N/A
footprint SOG65_20 (PW TSSOP (TI), MO-153-AC (JEDEC), 20Lead, pitch: 0.65mm, 6.5x4.4x1.2mm)
pins: 1 HIN1, 2 HIN2, 3 HIN3, 4 LIN1, 5 LIN2, 6 LIN3, 7 VCC, 8 COM, 9 LO3, 10 LO2, 11 LO1, 12 VS3, 13 HO3, 14 VB3, 15 VS2, 16 HO2, 17 VB2, 18 VS1, 19 HO1, 20 VB1

## FE1.1S_eec
designator U?, comment FE1.1S
USB HUB 2.0, 4 PORT; Designed by: nhox; Code: N/A
footprint SOG64_28 (TSSOP, 28Lead, pitch: 0.64mm, 10x4.4x1.2mm)
pins: 1 VSS, 2 XOUT, 3 XIN, 4 D4N, 5 D4P, 6 D3N, 7 D3P, 8 D2N, 9 D2P, 10 D1N, 11 D1P, 12 VD18 O, 13 VD33, 14 REXT, 15 DN, 16 DP, 17 ~{XRST}, 18 VBUSM, 19 ~{BUS}, 20 VDD5, 21 VD33 O, 22 DRV, 23 LED1, 24 LED2, 25 ~{PWR}, 26 ~{OVC}, 27 ~{TEST}, 28 VD18

## FS8205A TSSOP-8
designator IC?, comment FS8205A
Dual N-Channel Enhancement Mode Power MOSFET; Code: 1901-0354
footprint SOG65_8 (PW TSSOP (TI), MO-153 (JEDEC), 8Lead, pitch: 0.65mm, 3x4.4x1.2mm)
pins: 1 D12, 2 S1, 3 S1, 4 G1, 5 G2, 6 S2, 7 S2, 8 D12

## GD3200B
designator U?
GD3200B Play MP3 from USB-Flash (Max 32GB), TF-Card (Max 32GB), SPI-Flash (Max 128Mb = 32MB). Suond Card On Connect PC, Phone With Usb; Designed by: nhox; Code: N/A
footprint SO_16 (SOP, SOIC, 3.9mm width, 1.27mm pitch,)
pins: 1 ADKEY1, 2 ADKEY2, 3 BUSY, 4 VCC, 5 3V3_O, 6 SPI_DO/SD_CLK, 7 SPI_CLK/SD_CMD, 8 SPI_CS/SD_DAT, 9 D-, 10 D+, 11 RX, 12 TX, 13 DAC_R, 14 DAC_L, 15 GND, 16 VCOM

## GD3200B OnBoard JQ6500
designator U?, comment GD3200B
GD3200B Out Board JQ6500; Designed by: nhox; Code: N/A
footprint SO_16 (SOP, SOIC, 3.9mm width, 1.27mm pitch,)
pins: 1 ADKEY2, 2 RX, 3 TX, 4 VCC, 5 3V3_O, 6 SPI_DO/SD_CLK, 7 SPI_CLK/SD_CMD, 8 SPI_CS/SD_DAT, 9 D-, 10 D+, 11 ADKEY1, 12 BUSY, 13 DAC_R, 14 DAC_L, 15 GND, 16 VCOM

## GN1620 SOP20
designator IC?, comment GN1620
LED DRIVER 6GRID 8SEG, SPI, 3V-5.5V; Designed by: TranLuyen; Code: N/A
footprint SO_20_W (SOP, SOIC, 7.5mm width, 1.27mm pitch,)
pins: 1 VDD, 2 SEG1, 3 SEG2, 4 SEG3, 5 SEG4, 6 SEG5, 7 SEG6, 8 SEG7, 9 SEG8, 10 GRID6/SEG13, 11 GRID5/SEG14, 12 GND, 13 GRID4, 14 GRID3, 15 GND, 16 GRID2, 17 GRID1, 18 DIO, 19 CLK, 20 STB

## GN6932
designator GN6932, comment U?
GN6932 16 GRID 8 SEG SPI, Cathode x16 DIG, anode x8 DIG; Code: N/A
footprint SOIC_32_W (SOP, SOIC, 7.5mm width, 1.27mm pitch,)
pins: 1 GRID13, 2 GRID14, 3 GRID15, 4 GRID16, 5 GND, 6 DIN, 7 CLK, 8 STB, 9 NC, 10 SEG1, 11 SEG2, 12 SEG3, 13 SEG4, 14 SEG5, 15 SEG6, 16 SEG7, 17 SEG8, 18 VDD, 19 GND, 20 GRID1, 21 GRID2, 22 GRID3, 23 GRID4, 24 GRID5, 25 GRID6, 26 GRID7, 27 GRID8, 28 GND, 29 GRID9, 30 GRID10, 31 GRID11, 32 GRID12

## HEF4021 SOIC-16
designator IC?, comment HEF4021
8-bit static shift register parallel-to-serial converter; Designed by: TranLuyen; Code: N/A; ComponentLink1Description: Datasheet; ComponentLink1URL: https://assets.nexperia.com/documents/data-sheet/HEF4021B.pdf
footprint SO_16 (SOP, SOIC, 3.9mm width, 1.27mm pitch,)
pins: 1 PI-8, 2 Q5, 3 Q7, 4 PI-4, 5 PI-3, 6 PI-2, 7 PI-1, 8 VSS, 9 P/S, 10 CLOCK, 11 SERIAL_IN, 12 Q6, 13 PI-5, 14 PI-6, 15 PI-7, 16 VDD

## HEF4051B-SOIC-16
designator U?, comment HEF4051
8-channel analog multiplexer/demultiplexer; Designed by: TranLuyen; Code: N/A; ComponentLink1Description: datasheet; ComponentLink1URL: https://assets.nexperia.com/documents/data-sheet/HEF4051B.pdf
footprint SO_16 (SOP, SOIC, 3.9mm width, 1.27mm pitch,)
pins: 1 Y4 (io), 2 Y6 (io), 3 Z (io), 4 Y7 (io), 5 Y5 (io), 6 ~{E} (in), 7 VEE (power), 8 VSS (power), 9 S3 (in), 10 S2 (in), 11 S1 (in), 12 Y3 (io), 13 Y0 (io), 14 Y1 (io), 15 Y2 (io), 16 VDD (power)

## HEF4066 SOP-14
designator IC?, comment HEF4066
HEF4066B Quad single-pole single-throw analog switch; Code: 5004-036
footprint SO_14 (SOP, SOIC, 3.9mm width, 1.27mm pitch,)
pins: 1 1Y "OUTPUT", 2 1Z, 3 2Z, 4 2Y, 5 2E, 6 3E, 7 GND "OUTPUT", 8 3Y, 9 3Z, 10 4Z, 11 4Y, 12 4E, 13 1E, 14 VDD (power)

## HEF4094BT SOIC-16
designator IC?, comment HEF4094BT
Shift Register Single 8-Bit Serial/Parallel to Parallel 16-Pin SOIC T/R; Designed by: TranLuyen; Code: N/A; ComponentLink1Description: Datasheet; ComponentLink1URL: https://assets.nexperia.com/documents/data-sheet/HEF4094B.pdf
footprint SO_16 (SOP, SOIC, 3.9mm width, 1.27mm pitch,)
pins: 1 STR, 2 D, 3 CP, 4 QP0, 5 QP1, 6 QP2, 7 QP3, 8 VSS, 9 QS1, 10 QS2, 11 QP7, 12 QP6, 13 QP5, 14 QP4, 15 OE, 16 VDD

## HY2120 SOT23-6
designator IC?, comment HY2120
2-Cell Lithium-ion/Lithium Polymer Battery Packs Protection ICs; Designed by: TranLuyen; ComponentLink1Description: Datasheet; ComponentLink1URL: https://www.hycontek.com/wp-content/uploads/DS-HY2120_EN.pdf; Code: N/A
footprint SOT-23-6
pins: 1 OD, 2 OC, 3 CS, 4 VC, 5 VDD, 6 VSS

## HY2213-BB3A
designator IC?
1 Cell Li-ion/Polymer Battery Charge Balance IC; Code: N/A
footprint SOT-23-6
pins: 1 NC, 2 VDD, 3 VSS, 4 NC, 5 NC, 6 OUT

## IP2312
designator U?
Single-cell lithium battery synchronous switch step-down charging IC; Code: N/A
footprint SO_8T (SOP-8, 5x3.9mm body 1.27mm pitch, DDA, SO PowerPAD)
pins: 1 D1, 2 TEST, 3 D2, 4 NTC, 5 BAT, 6 ICHG, 7 SW, 8 VIN, 9 GND
text: TAB

## IP2325
designator U?
double-cell series lithium battery boost charging 2S; Designed by: TranLuyen; Code: N/A
footprint SO_8T (SOP-8, 5x3.9mm body 1.27mm pitch, DDA, SO PowerPAD)
pins: 1 VSYS, 2 VOUT, 3 VSET, 4 NTC, 5 LED, 6 VIN, 7 BST, 8 LX, 9 GND
text: TAB

## IP2364
designator U?
1-4S series lithium battery charging; Designed by: TranLuyen; Code: N/A; ComponentLink1Description: Datasheet; ComponentLink1URL: https://www.lcsc.com/datasheet/lcsc_datasheet_2401051808_INJOINIC-IP2364_C20416207.pdf
footprint SO_8T (SOP-8, 5x3.9mm body 1.27mm pitch, DDA, SO PowerPAD)
pins: 1 VSYS, 2 VIN, 3 VINSEN, 4 LED, 5 NTC, 6 FB, 7 BST, 8 LX, 9 GND
text: TAB

## IP5306
designator IC?
Battery Management ICs; Designed by: TranLuyen; Code: N/A
footprint SO_8T (SOP-8, 5x3.9mm body 1.27mm pitch, DDA, SO PowerPAD)
pins: 1 VIN, 2 LED1, 3 LED2, 4 LED3, 5 KEY, 6 BAT, 7 SW, 8 VOUT, 9 GND

## IP6510 ESOP-8
designator U?, comment IP6510
SOC Output 18W Power with Type-C PD and Fast Charge; Code: N/A
footprint SO_8T (SOP-8, 5x3.9mm body 1.27mm pitch, DDA, SO PowerPAD)
pins: 1 Vout, 2 Vin, 3 SW, 4 BST, 5 DM, 6 DP, 7 CC1, 8 CC2, 9 GND
text: TAB

## ISO1540DR
designator U?, comment ISO1540  (value not drawn)
Isolated bidirectional, I2C compatible, / communication; Code: 5104-022; Designed by: Nhox
footprint SO_8 (SOP-8, 5x3.9mm body 1.27mm pitch, SOT96-1, M08A, S8, SOIC8, VO8, MS-012AA(JEDEC), R-8, 8S2, VOG8)
pins: 1 VCC1 (power), 2 SDA1, 3 SCL1, 4 GND1 (power), 5 GND2 (power), 6 SCL2, 7 SDA2, 8 VCC2 (power)

## ISO1540DR-SOIC-8
designator U?, comment ISO1540  (value not drawn)
Isolated bidirectional, I2C compatible, / communication; Code: 5104-022; Designed by: TranLuyen
footprint SO_8 (SOP-8, 5x3.9mm body 1.27mm pitch, SOT96-1, M08A, S8, SOIC8, VO8, MS-012AA(JEDEC), R-8, 8S2, VOG8)
pins: 1 VCC1 (power), 2 SDA1, 3 SCL1, 4 GND1 (power), 5 GND2 (power), 6 SCL2, 7 SDA2, 8 VCC2 (power)

## ITR9608-F
designator U?
Code: 6011-032
footprint ITR9608-F (13x6x10mm (WxLxH))
pins: 1 A, 2 C, 3 C, 4 E

## JW5222
designator U?
2.5A, 6V, 1MHz / Synchronous Step-Down Converter; Code: 1901-0334
footprint SOT-23-6
pins: 1 EN, 2 GND, 3 SW, 4 Vin, 5 POK, 6 FB

## KP3210BSG
designator IC?
Code: 5015-138; Designed by: TranLuyen; ComponentLink1Description: Datasheets; ComponentLink1URL: https://github.com/TranLuyen-dev/Datasheets/blob/5509ea2398aaa100a4f907a247c93f0efcc5fc96/Integrated/KP3210BSGA_C554027.pdf
footprint SO_8 (SOP-8, 5x3.9mm body 1.27mm pitch, SOT96-1, M08A, S8, SOIC8, VO8, MS-012AA(JEDEC), R-8, 8S2, VOG8)
pins: 1 VDD, 2 GND, 3 FB, 4 CS, 5 DRAIN, 6 DRAIN, 7 DRAIN, 8 DRAIN

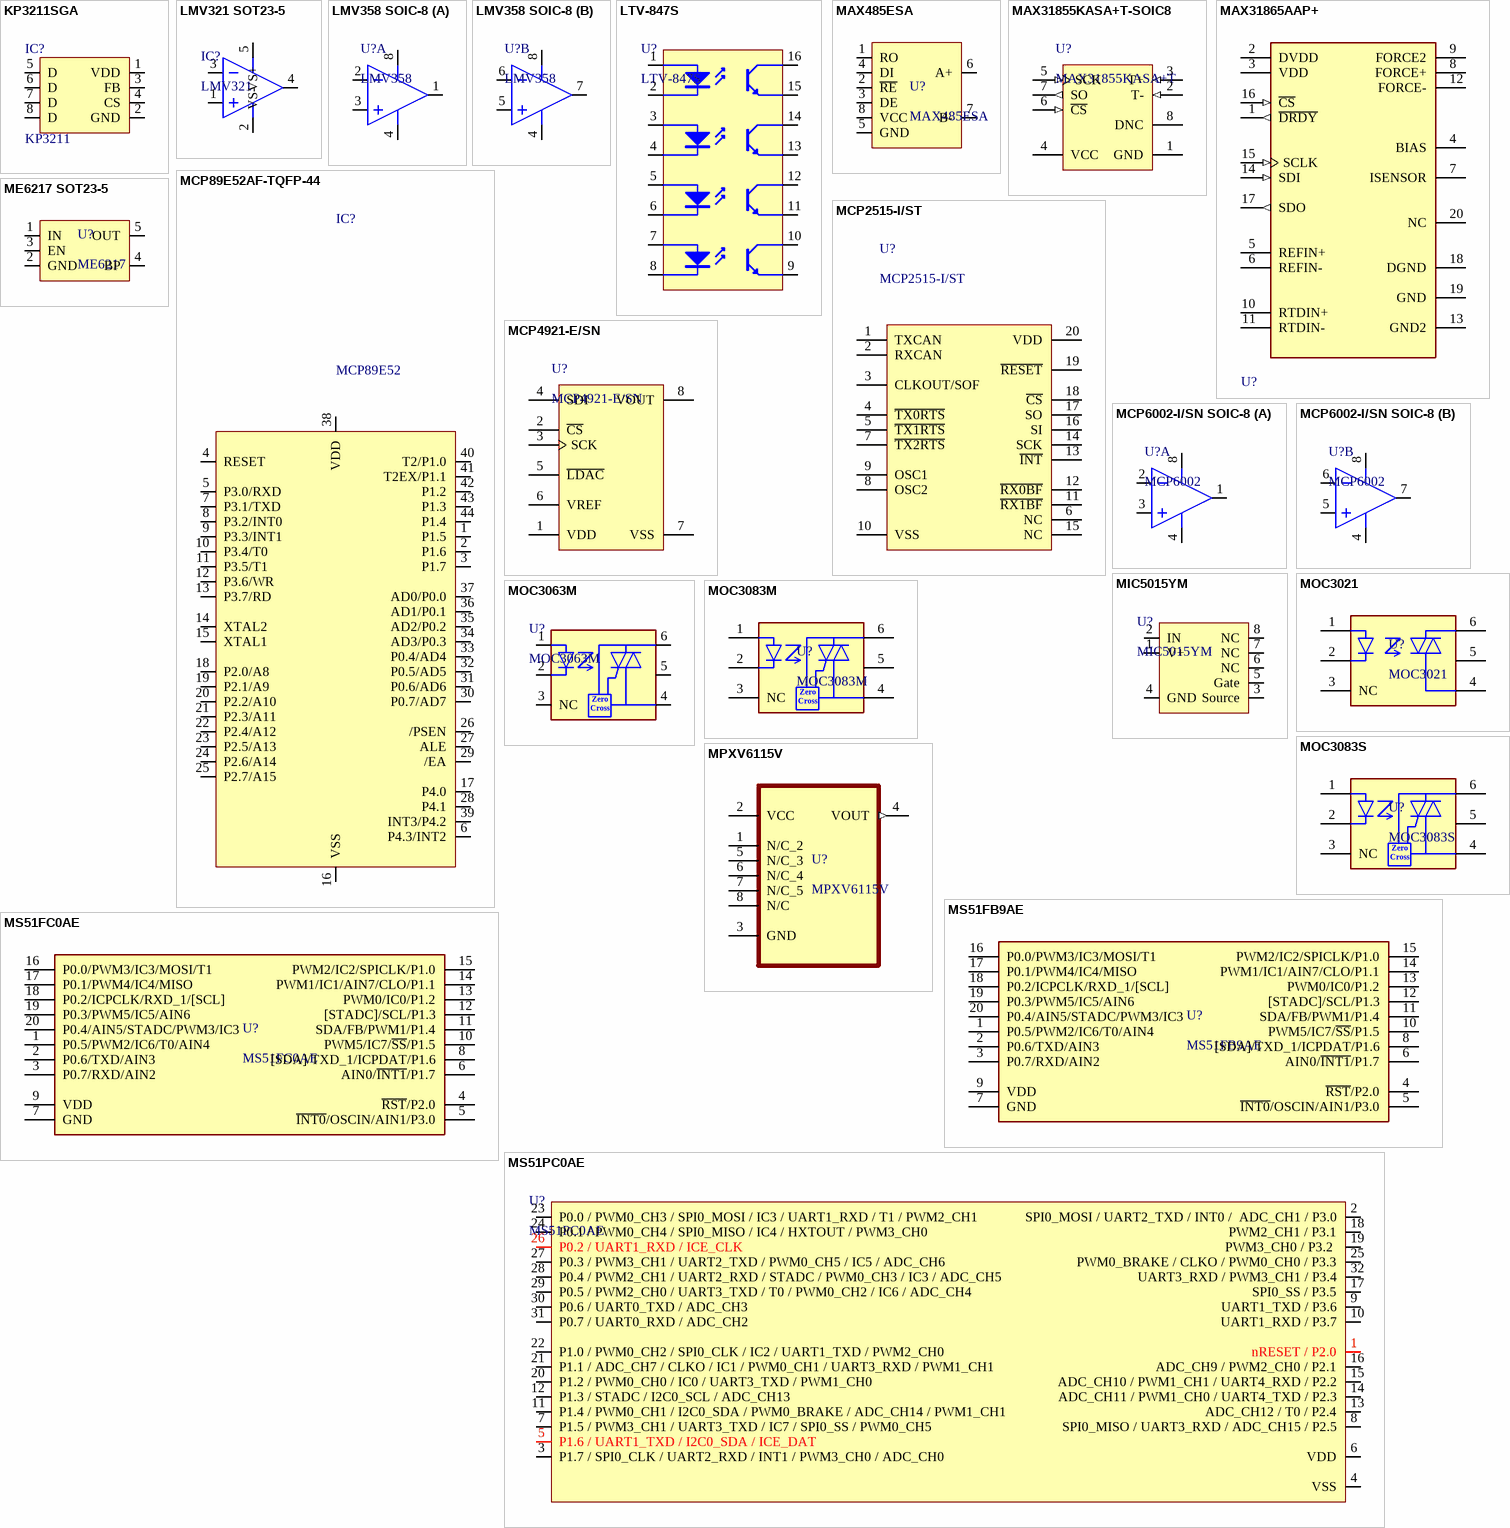
[diagram p3: symbols KP3211SGA to MS51PC0AE]

## KP3211SGA
designator IC?, comment KP3211
650V MOSFET, MAX 12V when FB Floated; Code: 5015-139; Designed by: Nhox
footprint SO_8 (SOP-8, 5x3.9mm body 1.27mm pitch, SOT96-1, M08A, S8, SOIC8, VO8, MS-012AA(JEDEC), R-8, 8S2, VOG8)
pins: 1 VDD, 2 GND, 3 FB, 4 CS, 5 D, 6 D, 7 D, 8 D

## LMV321 SOT23-5
designator IC?, comment LMV321
Opamp 1MHz, 60μA, Rail-to-Rail I/O CMOS Operational Amplifier; Designed by: TranLuyen; Code: N/A; ComponentLink1Description: Datasheet; ComponentLink1URL: https://www.ti.com/lit/ds/symlink/lmv321.pdf
footprint SOT-23-5
pins: 1 IN1+, 2 VS-, 3 IN1-, 4 OUT1, 5 VS+

## LMV358 SOIC-8
designator U?, comment LMV358
Low-Voltage Rail-to-Rail Output Operational Amplifier; ComponentLink2URL: https://www.ti.com/lit/ds/symlink/lmv324.pdf; ComponentLink2Description: Datasheet; Code: N/A
footprint SO_8 (SOP-8, 5x3.9mm body 1.27mm pitch, SOT96-1, M08A, S8, SOIC8, VO8, MS-012AA(JEDEC), R-8, 8S2, VOG8)
pins on every part: 4 VCC-, 8 VCC+
part A pins: 1 OUT1, 2 IN1-, 3 IN1+
part B pins: 5 IN2+, 6 IN2-, 7 OUT2

## LTV-847S
designator U?
Photocoupler, 50 mA, -30 to 110 degC, 16-Pin SMD, RoHS, Tube; Designed by: TranLuyen; Code: N/A
footprint SMD-16 (SMD, 16-Leads, Body 19.84x6.5mm, Pitch 2.54mm)
pins: 1 Anode1, 2 Cathode1, 3 Anode2, 4 Cathode2, 5 Anode3, 6 Cathode3, 7 Anode4, 8 Cathode4, 9 Emitter4, 10 Collector4, 11 Emitter3, 12 Collector3, 13 Emitter2, 14 Collector2, 15 Emitter1, 16 Collector1

## MAX485ESA
designator U?
Low-Power, Slew-Rate-Limited, RS-485/RS-422 Transceivers; Code: 5010-031; Designed by: nhox
footprint SO_8 (SOP-8, 5x3.9mm body 1.27mm pitch, SOT96-1, M08A, S8, SOIC8, VO8, MS-012AA(JEDEC), R-8, 8S2, VOG8)
pins: 1 RO, 2 ~{RE}, 3 DE, 4 DI, 5 GND, 6 A+, 7 B-, 8 VCC

## MAX31855KASA+T-SOIC8
designator U?, comment MAX31855KASA+T
Cold Junction Compensated Thermocouple to Digital Converter, 14 Bits Temperature Resolution, -40 to 125 degC, 8-Pin SOIC (S8+4), Pb-Free, Tape ang Reel; Designed by: TranLuyen; Parasite Pwr.: No; Interface: SPI; ComponentLink1Description: Manufacturer URL; Code: N/A; ComponentLink2Description: Datasheet; PartNumber: MAX31855KASA+T; PackageDescription: 8-Pin Small-Outline IC, Narrow, Body 3.9 x 4.9 mm, Pitch 1.27 mm; ComponentLink3URL: http://pdfserv.maximintegrated.com/package_dwgs/21-0041.PDF; ComponentLink3Description: Package Specification; ComponentLink1URL: http://www.maximintegrated.com/; Packing: Tape ang Reel; PackageVersion: Rev. D, 10/2012; Mounting Technology: Surface Mount; Generic Part Number: MAX31855; ComponentLink2URL: http://datasheets.maximintegrated.com/en/ds/MAX31855.pdf; PackageReference: S8+4
footprint SO_8 (SOP-8, 5x3.9mm body 1.27mm pitch, SOT96-1, M08A, S8, SOIC8, VO8, MS-012AA(JEDEC), R-8, 8S2, VOG8)
pins: 1 GND (power) "Ground", 2 T- (in) "Thermocouple Input. See Table 1. Do not connect to GND.", 3 T+ (in) "Thermocouple Input. See Table 1.", 4 VCC (power) "Power-Supply Voltage", 5 SCK (in) "Serial-Clock Input", 6 ~{CS} (in) "Active-Low Chip Select. Set C\S\ low to enable the serial interface.", 7 SO (out) "Serial-Data Output", 8 DNC "Do Not Connect"

## MAX31865AAP+
designator U?, comment MAX31865  (value not drawn)
MAX31865 Series 3.3 V RTD-to-Digital Converter - SSOP-20; Code: N/A
footprint Maxim_Integrated_A20-1_IPC_A
pins: 1 ~{DRDY} (out), 2 DVDD (power), 3 VDD (power), 4 BIAS, 5 REFIN+, 6 REFIN-, 7 ISENSOR, 8 FORCE+, 9 FORCE2, 10 RTDIN+, 11 RTDIN-, 12 FORCE-, 13 GND2 (power), 14 SDI (in), 15 SCLK (in), 16 ~{CS} (in), 17 SDO (out), 18 DGND (power), 19 GND (power), 20 NC

## MCP89E52AF-TQFP-44
designator IC?, comment MCP89E52
8051-Based MCU; Designed by: TranLuyen; Code: N/A; ComponentLink1Description: datasheet; ComponentLink1URL: http://www.megawin.com.tw/en-global/support/downloadDocument/136/292; ComponentLink2Description: Product; ComponentLink2URL: http://www.megawin.com.tw/en-global/product/productDetail/MPC89E_L52
footprint QFG80_44 (TQFP44, PQFP44, A44 (Cypress), QFP44/MQFP44N (Dallas), VQ44,VQG44 (Xilinx), MS-026ACB, MS-022AB(JEDEC), 44A, 10X10, 0.8mm)
pins: 1 P1.5, 2 P1.6, 3 P1.7, 4 RESET, 5 P3.0/RXD, 6 P4.3/INT2, 7 P3.1/TXD, 8 P3.2/INT0, 9 P3.3/INT1, 10 P3.4/T0, 11 P3.5/T1, 12 P3.6/WR, 13 P3.7/RD, 14 XTAL2, 15 XTAL1, 16 VSS, 17 P4.0, 18 P2.0/A8, 19 P2.1/A9, 20 P2.2/A10, 21 P2.3/A11, 22 P2.4/A12, 23 P2.5/A13, 24 P2.6/A14, 25 P2.7/A15, 26 /PSEN, 27 ALE, 28 P4.1, 29 /EA, 30 P0.7/AD7, 31 P0.6/AD6, 32 P0.5/AD5, 33 P0.4/AD4, 34 AD3/P0.3, 35 AD2/P0.2, 36 AD1/P0.1, 37 AD0/P0.0, 38 VDD, 39 INT3/P4.2, 40 T2/P1.0, 41 T2EX/P1.1, 42 P1.2, 43 P1.3, 44 P1.4

## MCP2515-I/ST
designator U?
Stand-Alone CAN Controller With SPI Interface, 20-Pin TSSOP, Industrial Temperature; Code: 5008-008; Designed by: TranLuyen
footprint SOG65_20 (PW TSSOP (TI), MO-153-AC (JEDEC), 20Lead, pitch: 0.65mm, 6.5x4.4x1.2mm)
pins: 1 TXCAN, 2 RXCAN, 3 CLKOUT/SOF, 4 ~{TX0RTS}, 5 ~{TX1RTS}, 6 NC, 7 ~{TX2RTS}, 8 OSC2, 9 OSC1, 10 VSS, 11 ~{RX1BF}, 12 ~{RX0BF}, 13 ~{INT}, 14 SCK, 15 NC, 16 SI, 17 SO, 18 ~{CS}, 19 ~{RESET}, 20 VDD

## MCP4921-E/SN
designator U?
12-Bit DAC with SPI Interface, 8-Pin SOIC 150mil, Extended Temperature; Designed by: TranLuyen; ComponentLink2URL: http://ww1.microchip.com/downloads/en/DeviceDoc/22248a.pdf; ComponentLink2Description: Datasheet; Code: N/A
footprint SO_8 (SOP-8, 5x3.9mm body 1.27mm pitch, SOT96-1, M08A, S8, SOIC8, VO8, MS-012AA(JEDEC), R-8, 8S2, VOG8)
pins: 1 VDD, 2 ~{CS}, 3 SCK, 4 SDI, 5 ~{LDAC}, 6 VREF, 7 VSS, 8 VOUT

## MCP6002-I/SN SOIC-8
designator U?, comment MCP6002
1 MHz, Low-Power Op Amp, Rail-to-Rail Input/Output; Code: 5003-054; Designed by: TranLuyen; ComponentLink2URL: http://www.ti.com/lit/ds/symlink/tl082.pdf; ComponentLink2Description: Datasheet
footprint SO_8 (SOP-8, 5x3.9mm body 1.27mm pitch, SOT96-1, M08A, S8, SOIC8, VO8, MS-012AA(JEDEC), R-8, 8S2, VOG8)
pins on every part: 4 VCC-, 8 VCC+
part A pins: 1 OUT1, 2 IN1-, 3 IN1+
part B pins: 5 IN2+, 6 IN2-, 7 OUT2

## ME6217 SOT23-5
designator U?, comment ME6217
High Output Current LDO Regulator , High PSRR , Low Dropout, Max 800mA. Vin: 2V~6.5V; Code: N/A
footprint SOT-23-5_A Microchip
pins: 1 IN, 2 GND, 3 EN, 4 BP, 5 OUT

## MIC5015YM
designator U?
Low-Cost High- or Low-Side MOSFET Driver; Code: 1901-0361; Designed by: Nhox
footprint SO_8 (SOP-8, 5x3.9mm body 1.27mm pitch, SOT96-1, M08A, S8, SOIC8, VO8, MS-012AA(JEDEC), R-8, 8S2, VOG8)
pins: 1 V+, 2 IN, 3 Source, 4 GND, 5 Gate, 6 NC, 7 NC, 8 NC

## MOC3021
designator U?
IC Optoisolator Triac Output 4170Vrms 1 Channel 6-SMD; Code: 2301-011; Designed by: nhox; Value: MOC3021
footprint SOP-6 7.12x6.5 2.54P (PDIP6 8.51x6.35, 2.54P)
pins: 1 A, 2 C, 3 NC, 4 1 MAIN TERM., 5 NC, 6 2 MAIN TERM.

## MOC3063M
designator U?
6-Pin SMD Zero-Cross Triac Driver Optocoupler (600 V Peak); Designed by: Nhox; Code: N/A
footprint CASE 646BY (PDIP6 8.51x6.35, 2.54P)
pins: 1 A, 2 C, 3 NC, 4 1 MAIN TERM., 5 NC, 6 2 MAIN TERM.
text: Zero; Cross

## MOC3083M
designator U?
6-Pin DIP Zero-Cross Triac Driver Optocoupler (800 V Peak); Code: 2301-003; Designed by: TranLuyen
footprint DIP_6 (DIP, pitch 2.54mm, 300mil Width)
footprint CASE 646BY (PDIP6 8.51x6.35, 2.54P)
pins: 1 A, 2 C, 3 NC, 4 1 MAIN TERM., 5 NC, 6 2 MAIN TERM.
text: Zero; Cross

## MOC3083S
designator U?
6-Pin SND Zero-Cross Triac Driver Optocoupler (800 V Peak); Code: N/A
footprint SOP-6 7.12x6.5 2.54P (PDIP6 8.51x6.35, 2.54P)
pins: 1 A, 2 C, 3 NC, 4 1 MAIN TERM., 5 NC, 6 2 MAIN TERM.
text: Zero; Cross

## MPXV6115V
designator U?
Code: N/A
footprint MPXV6115V
pins: 1 N/C_2, 2 VCC (power), 3 GND, 4 VOUT (out), 5 N/C_3, 6 N/C_4, 7 N/C_5, 8 N/C

## MS51FB9AE
designator U?
MS51FB9AE, ROM 16KB, RAM 256B + 1KB, SPROM 128B, 1T 8051-based CMOS up to 24Mhz; Code: 7201-019; Designed by: Nhox
footprint SOG65_20 (PW TSSOP (TI), MO-153-AC (JEDEC), 20Lead, pitch: 0.65mm, 6.5x4.4x1.2mm)
pins: 1 P0.5/PWM2/IC6/T0/AIN4, 2 P0.6/TXD/AIN3, 3 P0.7/RXD/AIN2, 4 ~{RST}/P2.0, 5 ~{INT0}/OSCIN/AIN1/P3.0, 6 AIN0/~{INT1}/P1.7, 7 GND, 8 [SDA]/TXD_1/ICPDAT/P1.6, 9 VDD, 10 PWM5/IC7/~{SS}/P1.5, 11 SDA/FB/PWM1/P1.4, 12 [STADC]/SCL/P1.3, 13 PWM0/IC0/P1.2, 14 PWM1/IC1/AIN7/CLO/P1.1, 15 PWM2/IC2/SPICLK/P1.0, 16 P0.0/PWM3/IC3/MOSI/T1, 17 P0.1/PWM4/IC4/MISO, 18 P0.2/ICPCLK/RXD_1/[SCL], 19 P0.3/PWM5/IC5/AIN6, 20 P0.4/AIN5/STADC/PWM3/IC3

## MS51FC0AE
designator U?
MS51FB9AE, ROM 32KB 2.4V~5.5V 51Series 24MHz 18 TSSOP-20 Microcontroller Units (MCUs/MPUs/SOCs) ROHS; Code: N/A; ComponentLink1Description: Link; ComponentLink1URL: https://www.lcsc.com/datasheet/lcsc_datasheet_2204211700_Nuvoton-Tech-MS51FC0AE_C910591.pdf
footprint SOG65_20 (PW TSSOP (TI), MO-153-AC (JEDEC), 20Lead, pitch: 0.65mm, 6.5x4.4x1.2mm)
pins: 1 P0.5/PWM2/IC6/T0/AIN4, 2 P0.6/TXD/AIN3, 3 P0.7/RXD/AIN2, 4 ~{RST}/P2.0, 5 ~{INT0}/OSCIN/AIN1/P3.0, 6 AIN0/~{INT1}/P1.7, 7 GND, 8 [SDA]/TXD_1/ICPDAT/P1.6, 9 VDD, 10 PWM5/IC7/~{SS}/P1.5, 11 SDA/FB/PWM1/P1.4, 12 [STADC]/SCL/P1.3, 13 PWM0/IC0/P1.2, 14 PWM1/IC1/AIN7/CLO/P1.1, 15 PWM2/IC2/SPICLK/P1.0, 16 P0.0/PWM3/IC3/MOSI/T1, 17 P0.1/PWM4/IC4/MISO, 18 P0.2/ICPCLK/RXD_1/[SCL], 19 P0.3/PWM5/IC5/AIN6, 20 P0.4/AIN5/STADC/PWM3/IC3

## MS51PC0AE
designator U?
MS51PC0AE, 51Series LQFP-32(7x7) Microcontrollers (MCU/MPU/SOC) ROHS; Code: N/A
footprint LQFP_32 (LQFP 32-pin (7.0 x 7.0 x 1.4 mm))
pins: 1 nRESET / P2.0, 2 SPI0_MOSI / UART2_TXD / INT0 /  ADC_CH1 / P3.0, 3 P1.7 / SPI0_CLK / UART2_RXD / INT1 / PWM3_CH0 / ADC_CH0, 4 VSS, 5 P1.6 / UART1_TXD / I2C0_SDA / ICE_DAT, 6 VDD, 7 P1.5 / PWM3_CH1 / UART3_TXD / IC7 / SPI0_SS / PWM0_CH5, 8 SPI0_MISO / UART3_RXD / ADC_CH15 / P2.5, 9 UART1_TXD / P3.6, 10 UART1_RXD / P3.7, 11 P1.4 / PWM0_CH1 / I2C0_SDA / PWM0_BRAKE / ADC_CH14 / PWM1_CH1, 12 P1.3 / STADC / I2C0_SCL / ADC_CH13, 13 ADC_CH12 / T0 / P2.4, 14 ADC_CH11 / PWM1_CH0 / UART4_TXD / P2.3, 15 ADC_CH10 / PWM1_CH1 / UART4_RXD / P2.2, 16 ADC_CH9 / PWM2_CH0 / P2.1, 17 SPI0_SS / P3.5, 18 PWM2_CH1 / P3.1, 19 PWM3_CH0 / P3.2 , 20 P1.2 / PWM0_CH0 / IC0 / UART3_TXD / PWM1_CH0, 21 P1.1 / ADC_CH7 / CLKO / IC1 / PWM0_CH1 / UART3_RXD / PWM1_CH1, 22 P1.0 / PWM0_CH2 / SPI0_CLK / IC2 / UART1_TXD / PWM2_CH0, 23 P0.0 / PWM0_CH3 / SPI0_MOSI / IC3 / UART1_RXD / T1 / PWM2_CH1, 24 P0.1 / PWM0_CH4 / SPI0_MISO / IC4 / HXTOUT / PWM3_CH0, 25 PWM0_BRAKE / CLKO / PWM0_CH0 / P3.3, 26 P0.2 / UART1_RXD / ICE_CLK , 27 P0.3 / PWM3_CH1 / UART2_TXD / PWM0_CH5 / IC5 / ADC_CH6, 28 P0.4 / PWM2_CH1 / UART2_RXD / STADC / PWM0_CH3 / IC3 / ADC_CH5, 29 P0.5 / PWM2_CH0 / UART3_TXD / T0 / PWM0_CH2 / IC6 / ADC_CH4, 30 P0.6 / UART0_TXD / ADC_CH3, 31 P0.7 / UART0_RXD / ADC_CH2, 32 UART3_RXD / PWM3_CH1 / P3.4

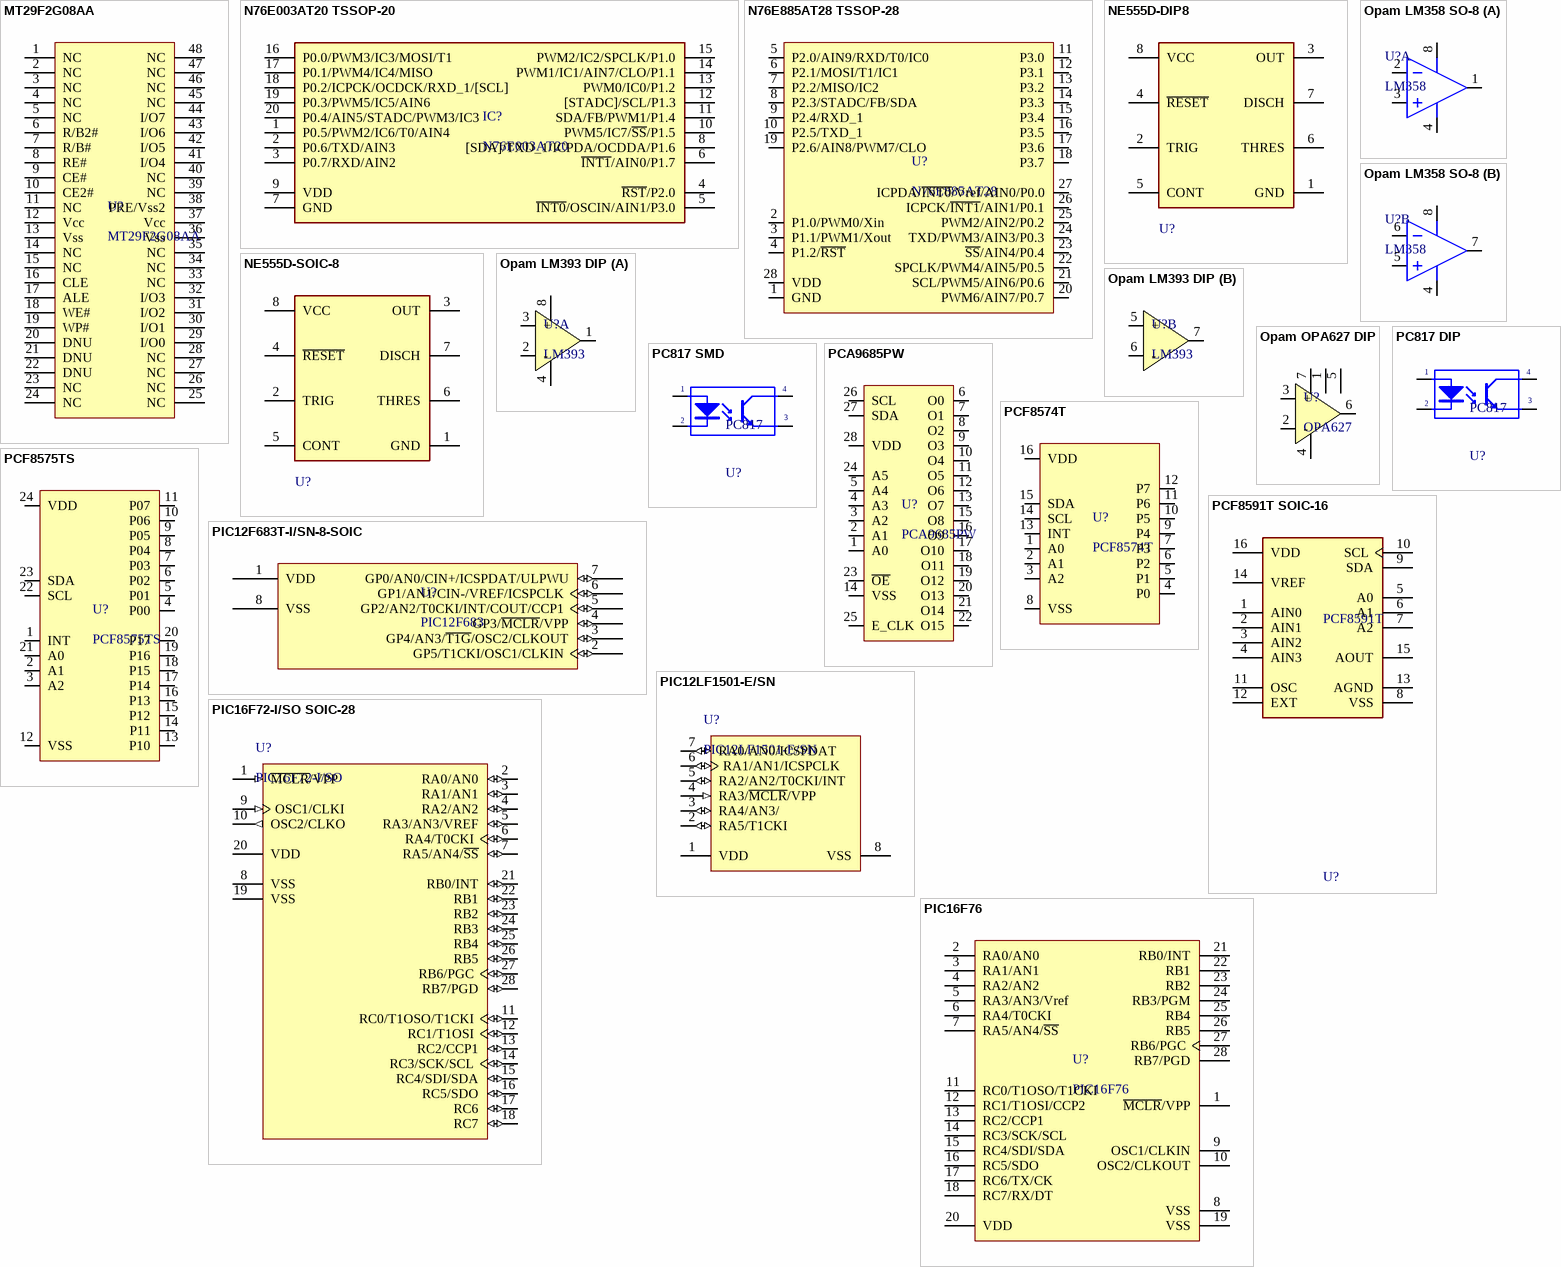
[diagram p4: symbols MT29F2G08AA to PIC16F76]

## MT29F2G08AA
designator U?
Device size: 2Gb, Endurance: 100,000 PROGRAM/ERASE cycles, VCC: 2.7V–3.6V, TSOP 48-Pin; Designed by: nhox; Code: N/A
footprint SOG50_48_W (TSOP I, 12x20mm, pitch: 0.5mm)
pins: 1 NC, 2 NC, 3 NC, 4 NC, 5 NC, 6 R/B2#, 7 R/B#, 8 RE#, 9 CE#, 10 CE2#, 11 NC, 12 Vcc, 13 Vss, 14 NC, 15 NC, 16 CLE, 17 ALE, 18 WE#, 19 WP#, 20 DNU, 21 DNU, 22 DNU, 23 NC, 24 NC, 25 NC, 26 NC, 27 NC, 28 NC, 29 I/O0, 30 I/O1, 31 I/O2, 32 I/O3, 33 NC, 34 NC, 35 NC, 36 Vss, 37 Vcc, 38 PRE/Vss2, 39 NC, 40 NC, 41 I/O4, 42 I/O5, 43 I/O6, 44 I/O7, 45 NC, 46 NC, 47 NC, 48 NC

## N76E003AT20 TSSOP-20
designator IC?, comment N76E003AT20
MCU 8-bit 8051 CISC 18KB ROM 3.3V/5V; Code: 7201-001; ComponentLink1Description: datasheet; ComponentLink1URL: https://datasheet.datasheetarchive.com/originals/distributors/DKDS-39/8249.pdf
footprint SOG65_20 (PW TSSOP (TI), MO-153-AC (JEDEC), 20Lead, pitch: 0.65mm, 6.5x4.4x1.2mm)
pins: 1 P0.5/PWM2/IC6/T0/AIN4, 2 P0.6/TXD/AIN3, 3 P0.7/RXD/AIN2, 4 ~{RST}/P2.0, 5 ~{INT0}/OSCIN/AIN1/P3.0, 6 ~{INT1}/AIN0/P1.7, 7 GND, 8 [SDA]/TXD_1/ICPDA/OCDDA/P1.6, 9 VDD, 10 PWM5/IC7/~{SS}/P1.5, 11 SDA/FB/PWM1/P1.4, 12 [STADC]/SCL/P1.3, 13 PWM0/IC0/P1.2, 14 PWM1/IC1/AIN7/CLO/P1.1, 15 PWM2/IC2/SPCLK/P1.0, 16 P0.0/PWM3/IC3/MOSI/T1, 17 P0.1/PWM4/IC4/MISO, 18 P0.2/ICPCK/OCDCK/RXD_1/[SCL], 19 P0.3/PWM5/IC5/AIN6, 20 P0.4/AIN5/STADC/PWM3/IC3

## N76E885AT28 TSSOP-28
designator U?, comment N76E885AT28
MCU 8-bit 8051 18KB ROM 3.3V/5V RAM 512 Byte; Code: N/A
footprint SOG65_28 (PW TSSOP (TI), MO-153-AE (JEDEC), 28Lead, pitch: 0.65mm, 10x4.4x1.2mm)
pins: 1 GND, 2 P1.0/PWM0/Xin, 3 P1.1/PWM1/Xout, 4 P1.2/~{RST}, 5 P2.0/AIN9/RXD/T0/IC0, 6 P2.1/MOSI/T1/IC1, 7 P2.2/MISO/IC2, 8 P2.3/STADC/FB/SDA, 9 P2.4/RXD_1, 10 P2.5/TXD_1, 11 P3.0, 12 P3.1, 13 P3.2, 14 P3.3, 15 P3.4, 16 P3.5, 17 P3.6, 18 P3.7, 19 P2.6/AIN8/PWM7/CLO, 20 PWM6/AIN7/P0.7, 21 SCL/PWM5/AIN6/P0.6, 22 SPCLK/PWM4/AIN5/P0.5, 23 ~{SS}/AIN4/P0.4, 24 TXD/PWM3/AIN3/P0.3, 25 PWM2/AIN2/P0.2, 26 ICPCK/~{INT1}/AIN1/P0.1, 27 ICPDA/~{INT0}/Vref/AIN0/P0.0, 28 VDD

## NE555D-DIP8
designator U?, comment NE555  (value not drawn)
General-purpose single bipolar timers; Code: 5015-001
footprint DIP_8 (DIP, pitch 2.54mm, 300mil Width)
pins: 1 GND, 2 TRIG, 3 OUT, 4 ~{RESET}, 5 CONT, 6 THRES, 7 DISCH (oc), 8 VCC

## NE555D-SOIC-8
designator U?, comment NE555D  (value not drawn)
General-purpose single bipolar timers; Code: 5015-045
footprint SO_8 (SOP-8, 5x3.9mm body 1.27mm pitch, SOT96-1, M08A, S8, SOIC8, VO8, MS-012AA(JEDEC), R-8, 8S2, VOG8)
pins: 1 GND, 2 TRIG, 3 OUT, 4 ~{RESET}, 5 CONT, 6 THRES, 7 DISCH (oc), 8 VCC

## Opam LM358 SO-8
designator U?, comment LM358
Code: 5003-042; ComponentLink1Description: New link
footprint SO_8 (SOP-8, 5x3.9mm body 1.27mm pitch, SOT96-1, M08A, S8, SOIC8, VO8, MS-012AA(JEDEC), R-8, 8S2, VOG8)
part A pins: 1 OUT1, 2 IN1-, 3 IN1+, 4 VCC-, 8 VCC+
part B pins: 4 VCC-, 5 IN2+, 6 IN2-, 7 OUT2, 8 VCC+

## Opam LM393 DIP
designator U?, comment LM393
Code: 5003-029; ComponentLink1Description: New link
footprint DIP_8 (DIP, pitch 2.54mm, 300mil Width)
part A pins: 1, 2 -, 3 +, 4, 8
part B pins: 5 +, 6 -, 7

## Opam OPA627 DIP
designator U?, comment OPA627
Code: N/A; ComponentLink1Description: New link
footprint DIP_8 (DIP, pitch 2.54mm, 300mil Width)
pins: 1, 2 -, 3 +, 4, 5, 6, 7

## PC817 DIP
designator U?, comment PC817
PC817 Single Opto DIP; Code: 2303-015
footprint OPTO cam
pins: 1 A "Anode", 2 K "Cathode", 3 E "Emitter", 4 C "Collector"

## PC817 SMD
designator U?, comment PC817
PC817 Single Opto SMD; Code: 2303-014
footprint OPTO SMD
pins: 1 A "Anode", 2 K "Cathode", 3 E "Emitter", 4 C "Collector"

## PCA9685PW
designator U?
16-channel, 12-bit PWM Fm+ I2C-bus LED controller; Designed by: Nhox; Code: N/A
footprint SOG65_28 (PW TSSOP (TI), MO-153-AE (JEDEC), 28Lead, pitch: 0.65mm, 10x4.4x1.2mm)
pins: 1 A0, 2 A1, 3 A2, 4 A3, 5 A4, 6 O0, 7 O1, 8 O2, 9 O3, 10 O4, 11 O5, 12 O6, 13 O7, 14 VSS, 15 O8, 16 O9, 17 O10, 18 O11, 19 O12, 20 O13, 21 O14, 22 O15, 23 ~{OE}, 24 A5, 25 E_CLK, 26 SCL, 27 SDA, 28 VDD

## PCF8574T
designator U?
16-SOIC, I2C 400kHz,Output Pull -1mA, Push 25mA, Input Pull_up -30=>-300uA; Code: 5007-031
footprint SO_16_W (SOP, SOIC, 7.5mm width, 1.27mm pitch,)
pins: 1 A0, 2 A1, 3 A2, 4 P0, 5 P1, 6 P2, 7 P3, 8 VSS, 9 P4, 10 P5, 11 P6, 12 P7, 13 INT, 14 SCL, 15 SDA, 16 VDD

## PCF8575TS
designator U?
SSOP24, I2C 400kHz,Output Pull -1.0mA, Push 25mA, Input Pull_up -30=>-300uA; Code: 5015-119
footprint SOG65_24_W (DB, SSOP24, TSSOP24, 0.65mm pitch, 5.3mm Width, SOT340-1, SOT355-1, MO-150AG, MO-153AD(JEDEC),)
pins: 1 INT, 2 A1, 3 A2, 4 P00, 5 P01, 6 P02, 7 P03, 8 P04, 9 P05, 10 P06, 11 P07, 12 VSS, 13 P10, 14 P11, 15 P12, 16 P13, 17 P14, 18 P15, 19 P16, 20 P17, 21 A0, 22 SCL, 23 SDA, 24 VDD

## PCF8591T SOIC-16
designator U?, comment PCF8591T
IC ADC/DAC 8BIT 11.1K 16SO; Code: 5006-009; ComponentLink2URL: https://www.nxp.com/docs/en/data-sheet/PCF8591.pdf; ComponentLink2Description: Datasheet
footprint SO_16_W (SOP, SOIC, 7.5mm width, 1.27mm pitch,)
pins: 1 AIN0, 2 AIN1, 3 AIN2, 4 AIN3, 5 A0, 6 A1, 7 A2, 8 VSS, 9 SDA, 10 SCL, 11 OSC, 12 EXT, 13 AGND, 14 VREF, 15 AOUT, 16 VDD

## PIC12F683T-I/SN-8-SOIC
designator U?, comment PIC12F683
Flash-Based 8-Bit CMOS Microcontroller with nanoWatt Technology, 2K (x14-Bit words) Program Memory, 384 Bytes Data Memory, 8-Pin SOIC, Industrial Temperature; Code: 7204-032
footprint SO_8 (SOP-8, 5x3.9mm body 1.27mm pitch, SOT96-1, M08A, S8, SOIC8, VO8, MS-012AA(JEDEC), R-8, 8S2, VOG8)
pins: 1 VDD (power), 2 GP5/T1CKI/OSC1/CLKIN (io), 3 GP4/AN3/~{T1G}/OSC2/CLKOUT (io), 4 GP3/~{MCLR}/VPP (io), 5 GP2/AN2/T0CKI/INT/COUT/CCP1 (io), 6 GP1/AN1/CIN-/VREF/ICSPCLK (io), 7 GP0/AN0/CIN+/ICSPDAT/ULPWU (io), 8 VSS (power)

## PIC12LF1501-E/SN
designator U?
Flash, 8-Bit Microcontroller, 20 MHz, 5 I/O, -40 to 125 degC, 8-pin SOIC (SN8), Tube; Manufacturer: Microchip; Internal Oscillator: 16 MHz, 31 kHz; Program Memory KWords: 1; I/O Pins: 5; RAM: 64; Max. CPU Speed MHz: 20; Operation Voltage Range: 1.8V - 3.6V; Timers: 2 - 8-bit, 1 - 16-bit; Program Memory KBytes: 1.75; # of A/D Channels: 4; Designed by: TranLuyen; PartNumber: PIC12LF1501-E/SN; ComponentLink1Description: Datasheet; ComponentLink2Description: Package Specification; DatasheetVersion: Rev. A; ComponentLink3URL: Product URL:http://www.microchip.com/datasheet/PIC12F1501; ComponentLink1URL: https://ww1.microchip.com/downloads/en/DeviceDoc/40001615C.pdf; Packing: TUBE; PackageReference: SOIC-SN8; ComponentLink3Description: URL Link1; PackageVersion: C04-057C, 12/2012; Memory Type: Flash; Mounting Technology: Surface Mount; PackageDescription: 8-Lead Plastic Small Outline, 4.9 x 3.9 mm Body, 1.27 mm Pitch
footprint SO_8 (SOP-8, 5x3.9mm body 1.27mm pitch, SOT96-1, M08A, S8, SOIC8, VO8, MS-012AA(JEDEC), R-8, 8S2, VOG8)
pins: 1 VDD (power) "Positive supply.", 2 RA5/T1CKI (io), 3 RA4/AN3/ (io), 4 RA3/~{MCLR}/VPP (in), 5 RA2/AN2/T0CKI/INT (io), 6 RA1/AN1/ICSPCLK (io), 7 RA0/AN0/ICSPDAT (io), 8 VSS (power) "Ground reference."

## PIC16F72-I/SO SOIC-28
designator U?, comment PIC16F72-I/SO
8-Bit CMOS FLASH Microcontroller with A/D Converter, 2K (x14-Bit words) FLASH, 128 Bytes RAM, 28-Pin SOIC, Standard VDD Range, Industrial Temperature; Designed by: TranLuyen; Code: 7204-036; ComponentLink1Description: Datasheet; ComponentLink1URL: http://ww1.microchip.com/downloads/en/devicedoc/39597b.pdf
footprint SOIC-28 (SOIC-28 Body 17.9x7.5x2.05mm, Pitch 1.27mm)
pins: 1 ~{MCLR}/VPP (in), 2 RA0/AN0 (io), 3 RA1/AN1 (io), 4 RA2/AN2 (io), 5 RA3/AN3/VREF (io), 6 RA4/T0CKI (io), 7 RA5/AN4/~{SS} (io), 8 VSS (power), 9 OSC1/CLKI (in), 10 OSC2/CLKO (out), 11 RC0/T1OSO/T1CKI (io), 12 RC1/T1OSI (io), 13 RC2/CCP1 (io), 14 RC3/SCK/SCL (io), 15 RC4/SDI/SDA (io), 16 RC5/SDO (io), 17 RC6 (io), 18 RC7 (io), 19 VSS (power), 20 VDD (power), 21 RB0/INT (io), 22 RB1 (io), 23 RB2 (io), 24 RB3 (io), 25 RB4 (io), 26 RB5 (io), 27 RB6/PGC (io), 28 RB7/PGD (io)

## PIC16F76
designator U?
Flash 8196 Single Word, SRAM 368 Byte, 22 I/O, 5 ADC 8 bit, SPI, I2C, USART, 2 Timer 8 bit, 1 Timer 16 bit, Max 20MHz clock input; Code: 7204-242
footprint SOIC-28 (SOIC-28 Body 17.9x7.5x2.05mm, Pitch 1.27mm)
pins: 1 ~{MCLR}/VPP, 2 RA0/AN0, 3 RA1/AN1, 4 RA2/AN2, 5 RA3/AN3/Vref, 6 RA4/T0CKI, 7 RA5/AN4/~{SS}, 8 VSS "Ground reference.", 9 OSC1/CLKIN, 10 OSC2/CLKOUT, 11 RC0/T1OSO/T1CKI, 12 RC1/T1OSI/CCP2, 13 RC2/CCP1, 14 RC3/SCK/SCL, 15 RC4/SDI/SDA, 16 RC5/SDO, 17 RC6/TX/CK, 18 RC7/RX/DT, 19 VSS "Ground reference.", 20 VDD "Positive supply.", 21 RB0/INT, 22 RB1, 23 RB2, 24 RB3/PGM, 25 RB4, 26 RB5, 27 RB6/PGC, 28 RB7/PGD